# Altium schematic symbol library SamacSys.SchLib: 1235 symbols (part 7 of 13)
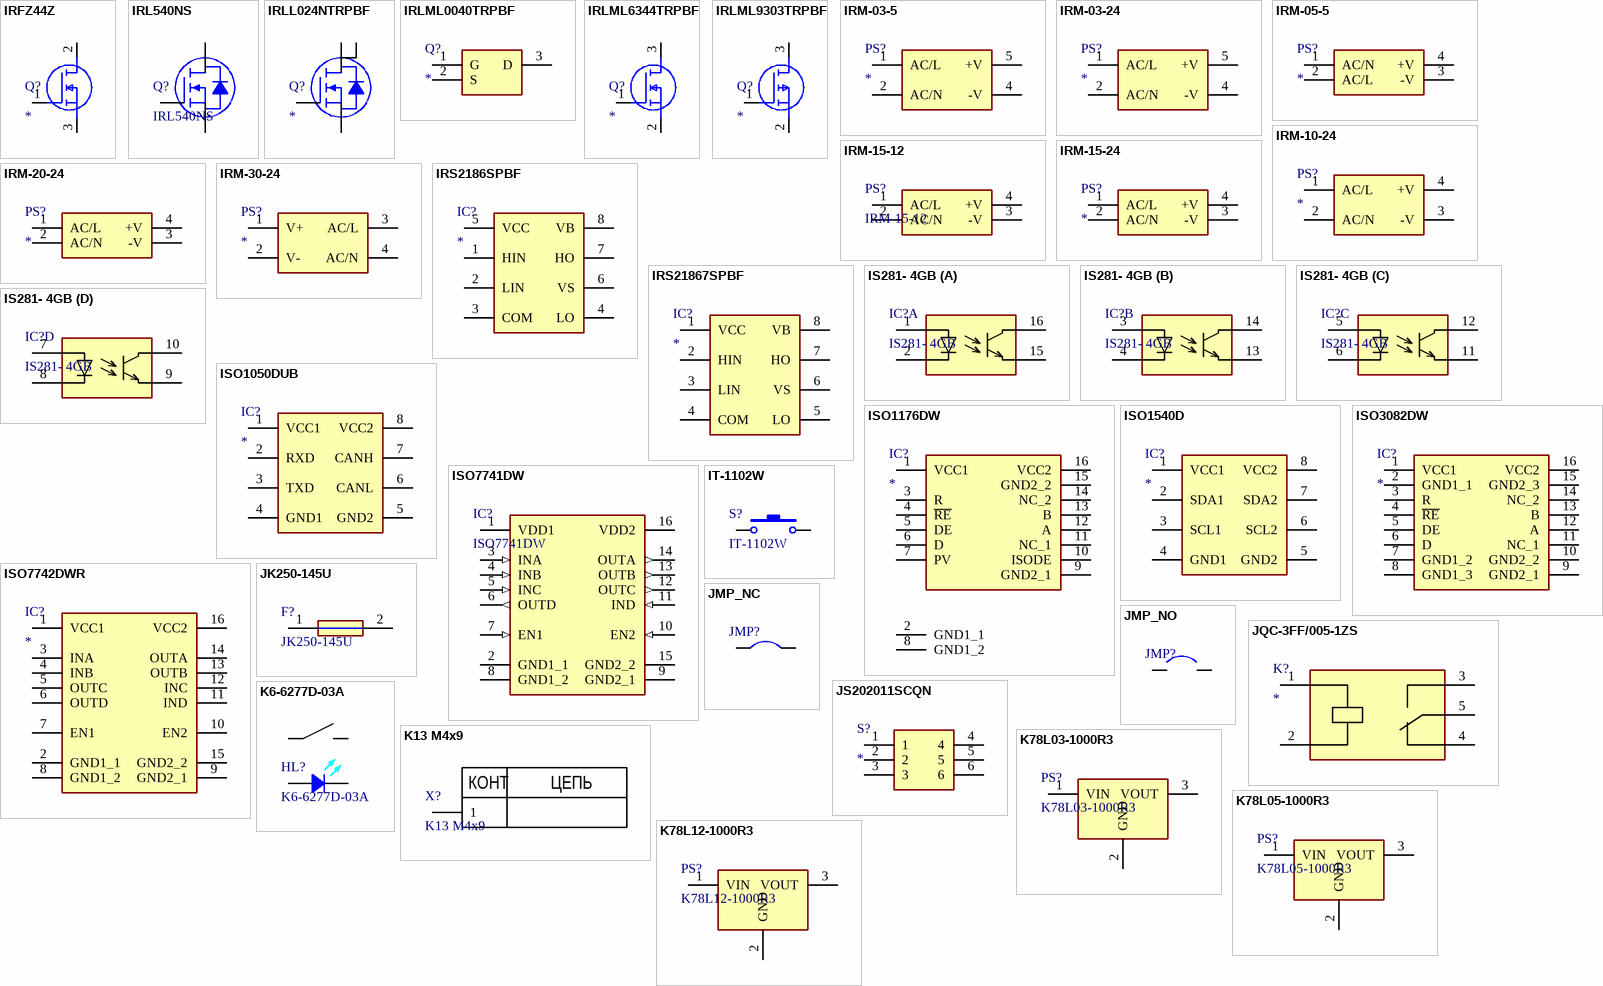
[diagram p51: symbols IRFZ44Z to K78L12-1000R3]

## K6-6277D-03A
designator HL?
SW + LED,, Blue; Manufacturer_Name: Korean Hroparts Elec; Datasheet Link: https://datasheet.datasheetarchive.com/originals/distributors/Datasheets-16/DSA-309848.pdf; Manufacturer_Part_Number: K6-6277D-03A; Mouser Part Number: N/A; Mouser Price/Stock: https://www.mouser.co.uk/ProductDetail/Kingbright/KP-2012MGC?qs=2JU0tDl2GZ0DzyNwePJZSw%3D%3D; Arrow Part Number: KP-2012QBC-D; Arrow Price/Stock: https://www.arrow.com/en/products/kp-2012mgc/kingbright
footprint K6-6277D (Footprint not found)
pins: 1, 2, 3 C, 4 A

## K13 M4x9
designator X?
Terminal Screw Type, 18-14AWG; Manufacturer_Name: Degson; Manufacturer_Part_Number: DG128-5.0-02P-14; Datasheet Link: https://www.degson.com/index.php?a=downloadFile&id=1097383&name=%27ZmlsZTQ=%27&lang=en; Height: 14.26mm
footprint K13 M4*9; pin to pad 1>1+2+3+4
pins: 1
text: КОНТ; ЦЕПЬ

## K78L03-1000R3
designator PS?
DC DC NON ISO 3.3V 1A 6.5V~36V Input; Manufacturer_Name: Mornsun; Datasheet Link: https://tracopower.com/tmh-datasheet/; Height: 10.45mm; Manufacturer_Part_Number: K78L03-1000R3
footprint K78Lxx-1000R3
footprint K78Lxx-500/1000ser
footprint K78xx-500/1000ser
pins: 1 VIN, 2 GND, 3 VOUT

## K78L05-1000R3
designator PS?
DC DC NON ISO 5V 1A 6.5V~36V Input; Manufacturer_Name: Mornsun; Datasheet Link: https://cdn.promelec.ru/upload/items/2025/03/24/K78Lxx-1000R3.pdf; Height: 10.45mm; Manufacturer_Part_Number: K78L05-1000R3
footprint K78Lxx-1000R3
footprint K78Lxx-500/1000ser
footprint K78xx-500/1000ser
pins: 1 VIN, 2 GND, 3 VOUT

## K78L12-1000R3
designator PS?
DC DC NON ISO 12V 1A 6.5V~36V Input; Manufacturer_Name: Mornsun; Datasheet Link: https://cdn.promelec.ru/upload/items/2025/03/24/K78Lxx-1000R3.pdf; Height: 10.45mm; Manufacturer_Part_Number: K78L12-1000R3
footprint K78Lxx-1000R3
footprint K78Lxx-500/1000ser
footprint K78xx-500/1000ser
pins: 1 VIN, 2 GND, 3 VOUT

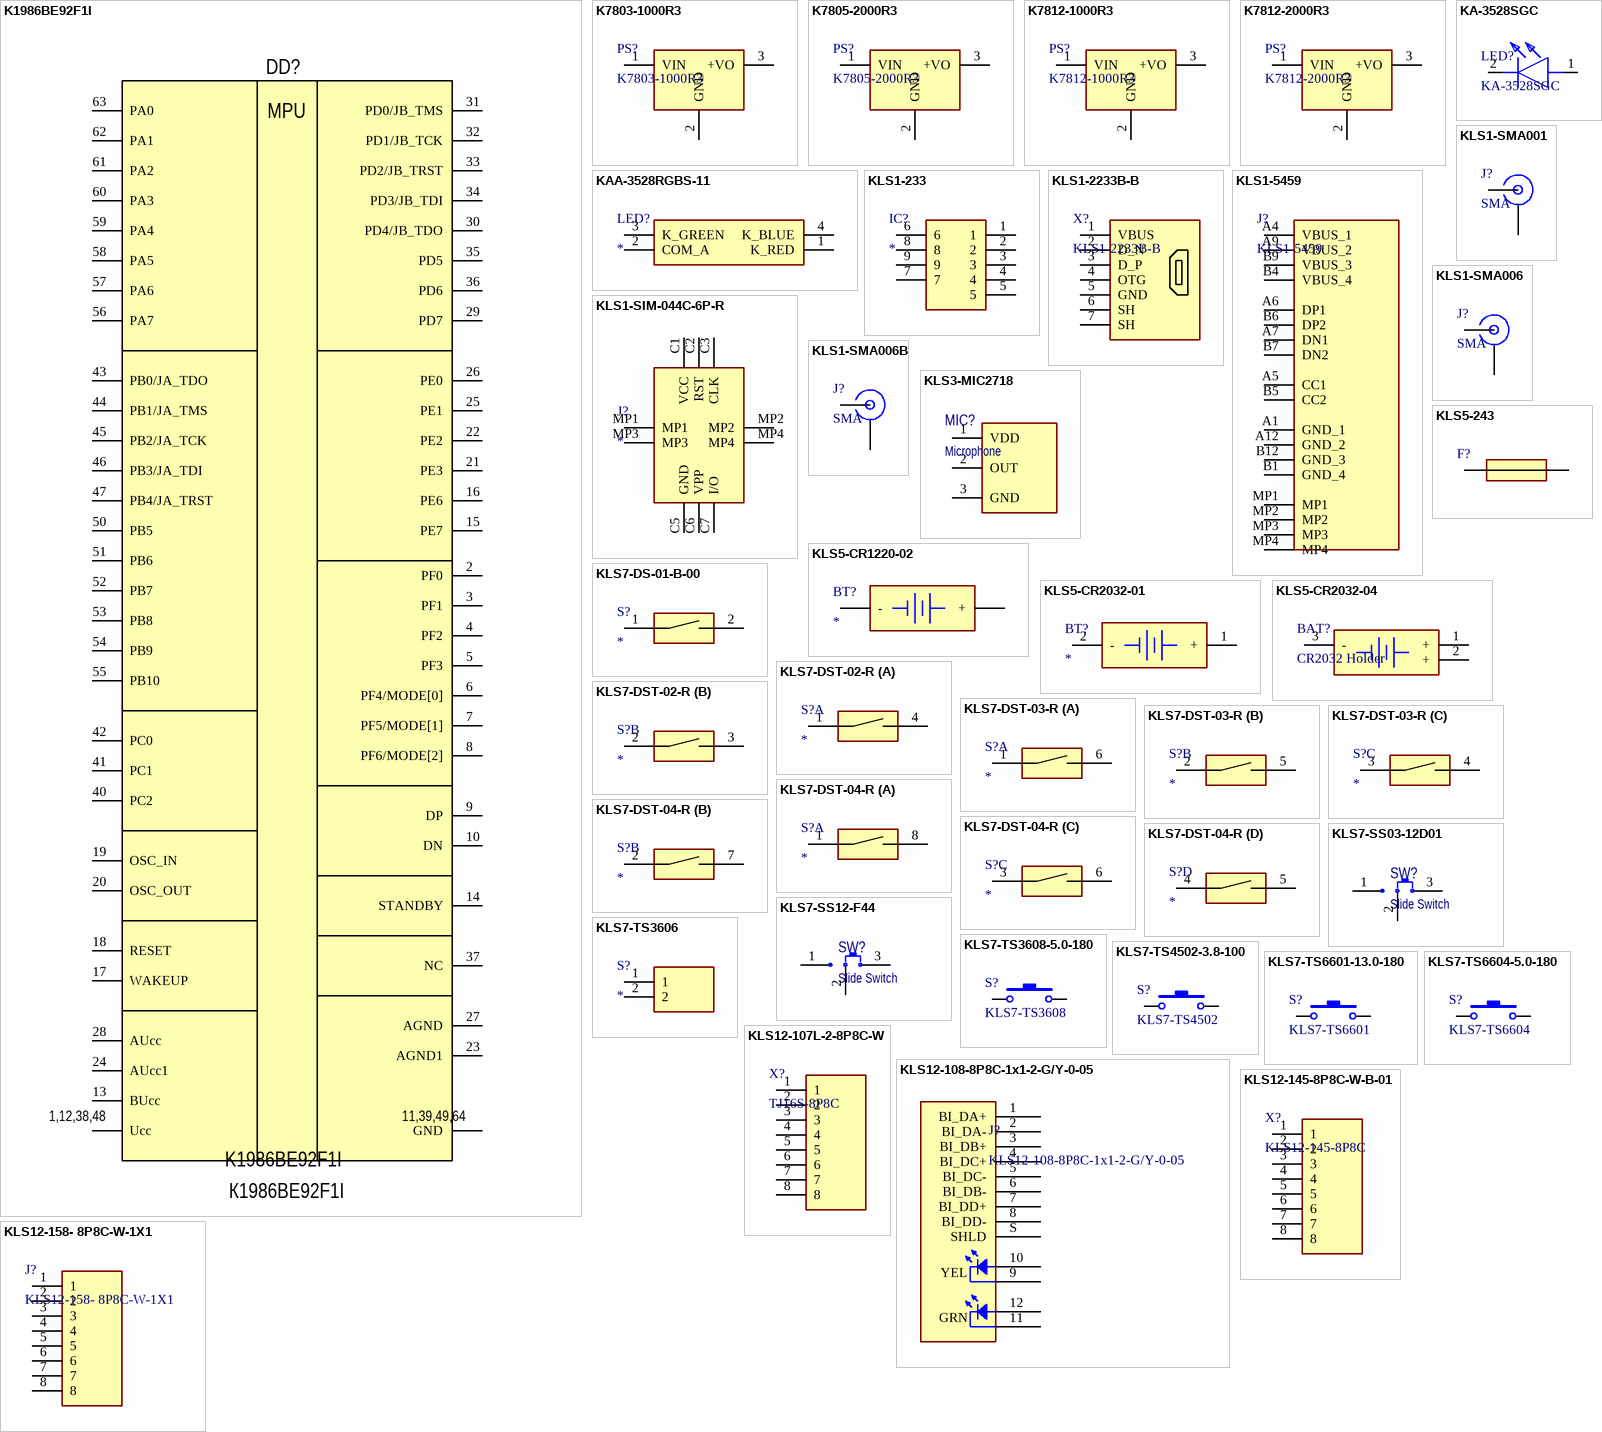
[diagram p20: symbols K1986BE92F1I to KLS12-158- 8P8C-W-1X1]

## K1986BE92F1I
designator DD?
IC MCU 32bit
footprint QFN50P1200X1200X180-64M (QFN, 64-Leads, Body 12,00x12,00mm, Pitch 0,50mm, IPC Low Density)
pins: 1 Ucc, 2 PF0, 3 PF1, 4 PF2, 5 PF3, 6 PF4/MODE[0], 7 PF5/MODE[1], 8 PF6/MODE[2], 9 DP, 10 DN, 11 GND, 12 Ucc, 13 BUcc, 14 STANDBY, 15 PE7, 16 PE6, 17 WAKEUP, 18 RESET, 19 OSC_IN, 20 OSC_OUT, 21 PE3, 22 PE2, 23 AGND1, 24 AUcc1, 25 PE1, 26 PE0, 27 AGND, 28 AUcc, 29 PD7, 30 PD4/JB_TDO, 31 PD0/JB_TMS, 32 PD1/JB_TCK, 33 PD2/JB_TRST, 34 PD3/JB_TDI, 35 PD5, 36 PD6, 37 NC, 38 Ucc, 39 GND, 40 PC2, 41 PC1, 42 PC0, 43 PB0/JA_TDO, 44 PB1/JA_TMS, 45 PB2/JA_TCK, 46 PB3/JA_TDI, 47 PB4/JA_TRST, 48 Ucc, 49 GND, 50 PB5, 51 PB6, 52 PB7, 53 PB8, 54 PB9, 55 PB10, 56 PA7, 57 PA6, 58 PA5, 59 PA4, 60 PA3, 61 PA2, 62 PA1, 63 PA0, 64 GND
text: MPU; 1,12,38,48; 11,39,49,64

## K7803-1000R3
designator PS?
DCDC, Non Isolated, 3,3V, 1W; Manufacturer_Name: MORNSUN; Manufacturer_Part_Number: K7805-1000R3; Datasheet Link: https://www.mornsun-power.com/html/pdf/K7805-2000R3.html; Height: 18mm
footprint K78xx-1000R3
pins: 1 VIN, 2 GND, 3 +VO

## K7805-2000R3
designator PS?
DCDC, Non Isolated, 5V, 2W; Manufacturer_Name: MORNSUN; Datasheet Link: https://www.mornsun-power.com/html/pdf/K7805-2000R3.html; Height: 18mm; Manufacturer_Part_Number: K7805-2000R3
footprint K78052000R3
pins: 1 VIN, 2 GND, 3 +VO

## K7812-1000R3
designator PS?
DCDC, Non Isolated, 12V, 1W; Manufacturer_Name: MORNSUN; Datasheet Link: https://www.mornsun-power.com/html/pdf/K7805-2000R3.html; Height: 18mm; Manufacturer_Part_Number: K7812-1000R3
footprint K78xx-1000R3
pins: 1 VIN, 2 GND, 3 +VO

## K7812-2000R3
designator PS?
DCDC, Non Isolated, 12V, 2W; Manufacturer_Name: MORNSUN; Datasheet Link: https://www.mornsun-power.com/html/pdf/K7805-2000R3.html; Height: 18mm; Manufacturer_Part_Number: K7812-2000R3
footprint K78052000R3
pins: 1 VIN, 2 GND, 3 +VO

## KA-3528SGC
designator LED?
LED; Manufacturer_Name: Kingbright; Datasheet Link: https://componentsearchengine.com/Datasheets/2/KA-3528SGC.pdf; Height: 2.1mm; Manufacturer_Part_Number: KA-3528SGC; Mouser Part Number: N/A; Mouser Price/Stock: https://www.mouser.co.uk/ProductDetail/Kingbright/KA-3528SGC?qs=Kyi72x88zz13uqpLS2dkBg%3D%3D; Arrow Part Number: KA-3528SGC; Arrow Price/Stock: https://www.arrow.com/en/products/ka-3528sgc/kingbright
footprint KA3528SGC
pins: 1 A, 2 K

## KAA-3528RGBS-11
designator LED?
LED; Manufacturer_Name: Kingbright; Manufacturer_Part_Number: KAA-3528RGBS-11; Datasheet Link: http://www.kingbright.com/attachments/file/psearch/000/00/20160808bak/KAA-3528RGBS-11(Ver.3B).pdf; Height: 2.1mm; Mouser Part Number: N/A; Mouser Price/Stock: https://www.mouser.co.uk/ProductDetail/Kingbright/KAA-3528RGBS-11?qs=8qEfIxKlfRlmdzsj8blhNw%3D%3D; Arrow Part Number: KAA-3528RGBS-11; Arrow Price/Stock: https://www.arrow.com/en/products/kaa-3528rgbs-11/kingbright
footprint KAA3528RGBS11
pins: 1 K_RED, 2 COM_A, 3 K_GREEN, 4 K_BLUE

## KLS1-233
designator IC?
Integrated Circuit; Manufacturer_Name: KLS Electronic; Manufacturer_Part_Number: KLS1-233; Height: 2mm
footprint KLS1233
pins: 1, 2, 3, 4, 5, 6, 7, 8, 9

## KLS1-2233B-B
designator X?
Connector, USB, Micro USB 2.0 Vertical; Manufacturer: KLS; Datasheet Link: https://static.chipdip.ru/lib/747/DOC042747020.pdf; Part Number: KLS1-2233B-B; Manufacturer 2: GCT; Part Number 2: USB3130
footprint KLS1-2233B (Micro USB Vertical)
pins: 1 VBUS, 2 D_N, 3 D_P, 4 OTG, 5 GND, 6 SH, 7 SH

## KLS1-5459
designator J?
Connector, USB, TypeC, Vertical, TH; Manufacturer_Name: KLS; Height: 3.21mm; Manufacturer_Part_Number: KLS1-5459
footprint KLS1-5459 (Footprint not found)
pins: A1 GND_1, A4 VBUS_1, A5 CC1, A6 DP1, A7 DN1, A9 VBUS_2, A12 GND_2, B1 GND_4, B4 VBUS_4, B5 CC2, B6 DP2, B7 DN2, B9 VBUS_3, B12 GND_3, MP1, MP2, MP3, MP4

## KLS1-SIM-044C-6P-R
designator J?
Connector; Manufacturer_Name: Ningbo; Manufacturer_Part_Number: L-KLS1-SIM-044C-6P-R; Datasheet Link: http://cnkls.com/admin/product_upload/20190319142459L-KLS1-SIM-044C.pdf; Height: 1.85mm
footprint LKLS1SIM044C6PR
pins: C1 VCC, C2 RST, C3 CLK, C5 GND, C6 VPP, C7 I/O, MP1, MP2, MP3, MP4

## KLS1-SMA001
designator J?, comment SMA
Connector, SMA, Vertical; Manufacturer_Name: KLS; Manufacturer_Part_Number: KLS1-SMA001; Datasheet Link: https://static.chipdip.ru/lib/528/DOC059528548.pdf
footprint 5-1814832-1; pin to pad 2>2+3+4+5
pins: 1 SIGNAL, 2 GND

## KLS1-SMA006
designator J?, comment SMA
Connector, SMA, Right Angle, 17mm; Manufacturer_Name: KLS; Manufacturer_Part_Number: KLS1-SMA001; Datasheet Link: https://static.chipdip.ru/lib/528/DOC059528548.pdf
footprint KLS1-006; pin to pad 2>2+3+4+5
pins: 1 SIGNAL, 2 GND

## KLS1-SMA006B
designator J?, comment SMA
Connector, SMA, Right Angle, 20.5mm; Manufacturer_Name: KLS; Manufacturer_Part_Number: KLS1-SMA001; Datasheet Link: https://static.chipdip.ru/lib/528/DOC059528548.pdf
footprint KLS1-006B; pin to pad 2>2+3+4+5
pins: 1 SIGNAL, 2 GND

## KLS3-MIC2718
designator MIC?, comment Microphone
Silicon MEMS Omni-directional Microphone
footprint KLS3-MIC2718
pins: 1 VDD, 2 OUT, 3 GND

## KLS5-243
designator F?
Fuse Holder, 5.2*20mm; Manufacturer_Name: KLS; Manufacturer_Part_Number: KLS5-243; Datasheet Link: https://www.klsele.com/admin/product_upload/20140310125749KLS5-242.pdf; Height: 11 mm
footprint KLS5-243 (Footprint not found)
footprint KLS5-242 (Fuse Holder, 5.2*20mm)
pins: 1 +VIN, 2 -VIN

## KLS5-CR1220-02
designator BT?
Battery Holder, Horizontal, SMD, CR1220; Manufacturer_Name: KLS Electronic; Manufacturer_Part_Number: KLS5-CR2032-31; Datasheet Link: https://cdn.ozdisan.com/ETicaret_Dosya/497432_334345.pdf; Height: 5.1mm
footprint KLS5CR122002
pins: NEG -, POS +

## KLS5-CR2032-01
designator BT?
Battery Holder, Horizontal, CR2032; Manufacturer_Name: KLS Electronic; Manufacturer_Part_Number: KLS5-CR2032-31; Datasheet Link: https://cdn.ozdisan.com/ETicaret_Dosya/497432_334345.pdf; Height: 5.1mm
footprint KLS5CR203201
pins: 1 +, 2 -

## KLS5-CR2032-04
designator BAT?, comment CR2032 Holder
Battery Holder, Vertical, CR2032; Manufacturer_Name: KLS Electronic; Manufacturer_Part_Number: KLS5-CR2032-04; Datasheet Link: http://www.klsele.com/admin/product_upload/20151124101114KLS5-CR2032-04.pdf; Height: 18.13mm
footprint KLS5CR203204
pins: 1 +, 2 +, 3 -

## KLS7-DS-01-B-00
designator S?
Switch; Manufacturer_Name: KLS Electronic; Manufacturer_Part_Number: KLS7-DS-01-B-00; Datasheet Link: https://static.chipdip.ru/lib/842/DOC003842989.pdf; Height: 6.9mm
footprint KLS7DS01B00
pins: 1 COM, 2 NO

## KLS7-DST-02-R
designator S?
DIP Switch 2P Blue; Manufacturer_Name: KLS; Manufacturer_Part_Number: KLS7-DST-02-R; Datasheet Link: https://www.klsconnector.com/wp-content/uploads/20200522104221KLS7-DST.pdf; Height: 6.6
footprint KLS7-DS02-B
part A pins: 1, 4
part B pins: 2, 3

## KLS7-DST-03-R
designator S?
DIP Switch 3P Blue; Manufacturer_Name: KLS; Manufacturer_Part_Number: KLS7-DST-03-R; Datasheet Link: https://www.klsconnector.com/wp-content/uploads/20200522104221KLS7-DST.pdf; Height: 6.6
footprint KLS7-DS03-B
part A pins: 1, 6
part B pins: 2, 5
part C pins: 3, 4

## KLS7-DST-04-R
designator S?
DIP Switch 4P Blue; Manufacturer_Name: KLS; Manufacturer_Part_Number: KLS7-DST-04-R; Datasheet Link: https://www.klsconnector.com/wp-content/uploads/20200522104221KLS7-DST.pdf; Height: 6.6
footprint KLS7-DS04-B
footprint KLS7-DS04-B_WING
part A pins: 1, 8
part B pins: 2, 7
part C pins: 3, 6
part D pins: 4, 5

## KLS7-SS03-12D01
designator SW?, comment Slide Switch
Slide Switch, 1P2T; Manufacturer: KLS; Part Number: KLS7-SS03-12D01
footprint KLS7-SS03-12D01
pins: 1, 2 COM, 3

## KLS7-SS12-F44
designator SW?, comment Slide Switch
Slide Switch, 1P2T; Manufacturer: KLS; Part Number: KLS7-SS12-F44
footprint KLS7-SS12F44
pins: 1, 2 COM, 3

## KLS7-TS3606
designator S?
Switch; Manufacturer_Name: KLS Electronic; Manufacturer_Part_Number: KLS7-TS3606; Datasheet Link: http://www.klsele.com/admin/product_upload/20120515131507KLS7-TS3606.pdf; Height: 3.5mm
footprint KLS7TS3606
pins: 1, 2

## KLS7-TS3608-5.0-180
designator S?, comment KLS7-TS3608
Switch Tact; Manufacturer_Name: KLS Electronic; Manufacturer_Part_Number: KLS7-TS3608-5.0-180; Datasheet Link: https://img.klsele.com/admin/product_upload/20120515131419KLS7-TS3608.pdf; Height: 5mm
footprint KLS7TS360850180
pins: 1, 2

## KLS7-TS4502-3.8-100
designator S?, comment KLS7-TS4502
Switch Tact; Manufacturer_Name: KLS Electronic; Manufacturer_Part_Number: KLS7-TS4502-3.8-100; Datasheet Link: https://img.klsele.com/admin/product_upload/20120515131419KLS7-TS3608.pdf; Height: 5mm
footprint KLS7TS4502 (4,5mm tactile button); pin to pad 1>1+2 2>3+4
pins: 1, 2

## KLS7-TS6601-13.0-180
designator S?, comment KLS7-TS6601
Switch Tact, 6mm, 13mmH; Manufacturer_Name: KLS Electronic; Manufacturer_Part_Number: KLS7-TS6604-5.0-180; Datasheet Link: https://img.klsele.com/admin/product_upload/20120515131419KLS7-TS3608.pdf; Height: 5mm
footprint KLS7TS6601 (6x6 mm tactile button); pin to pad 1>1+2 2>3+4
pins: 1, 2

## KLS7-TS6604-5.0-180
designator S?, comment KLS7-TS6604
Switch Tact; Manufacturer_Name: KLS Electronic; Manufacturer_Part_Number: KLS7-TS6604-5.0-180; Datasheet Link: https://img.klsele.com/admin/product_upload/20120515131419KLS7-TS3608.pdf; Height: 5mm
footprint KLS7TS6604 (6 2mm tactile button); pin to pad 1>1+2 2>3+4
pins: 1, 2

## KLS12-107L-2-8P8C-W
designator X?, comment TJ16S-8P8C
Connector, RJ-45; Manufacturer_Name: KLS; Manufacturer_Part_Number: KLS12-107L-2-8P8C; Datasheet Link: https://img.klsele.com/admin/product_upload/20191230125157KLS12-145-8P8C.pdf; Height: 16.63mm
footprint TJ16S-8P8C
pins: 1, 2, 3, 4, 5, 6, 7, 8

## KLS12-108-8P8C-1x1-2-G/Y-0-05
designator J?
Connector, RJ-45, with LED, RA
footprint KLS12-108-8P8C-1x1-G/Y-0-05 (RJ45 Receptacle 1 Shielded Right-Angle WithLED)
pins: 1 BI_DA+, 2 BI_DA-, 3 BI_DB+, 4 BI_DC+, 5 BI_DC-, 6 BI_DB-, 7 BI_DD+, 8 BI_DD-, 9 P10, 10 P9, 11 P12, 12 P11, S SHLD
text: YEL; GRN

## KLS12-145-8P8C-W-B-01
designator X?, comment KLS12-145-8P8C
Connector, RJ-45; Manufacturer_Name: KLS; Manufacturer_Part_Number: KLS12-145-8P8C-W-B-01; Datasheet Link: https://img.klsele.com/admin/product_upload/20191230125157KLS12-145-8P8C.pdf; Height: 16.63mm
footprint KLS12-145-8P8C (Footprint not found)
pins: 1, 2, 3, 4, 5, 6, 7, 8

## KLS12-158- 8P8C-W-1X1
designator J?
Connector, RJ-45; Manufacturer_Name: KLS; Datasheet Link: https://www.promelec.ru/fs/sources/1b/fa/67/08/39a111b4bd5c0bc00b1d2612.pdf; Height: 16.63mm; Manufacturer_Part_Number: KLS12-158- 8P8C-W-1X1
footprint 424108314
pins: 1, 2, 3, 4, 5, 6, 7, 8

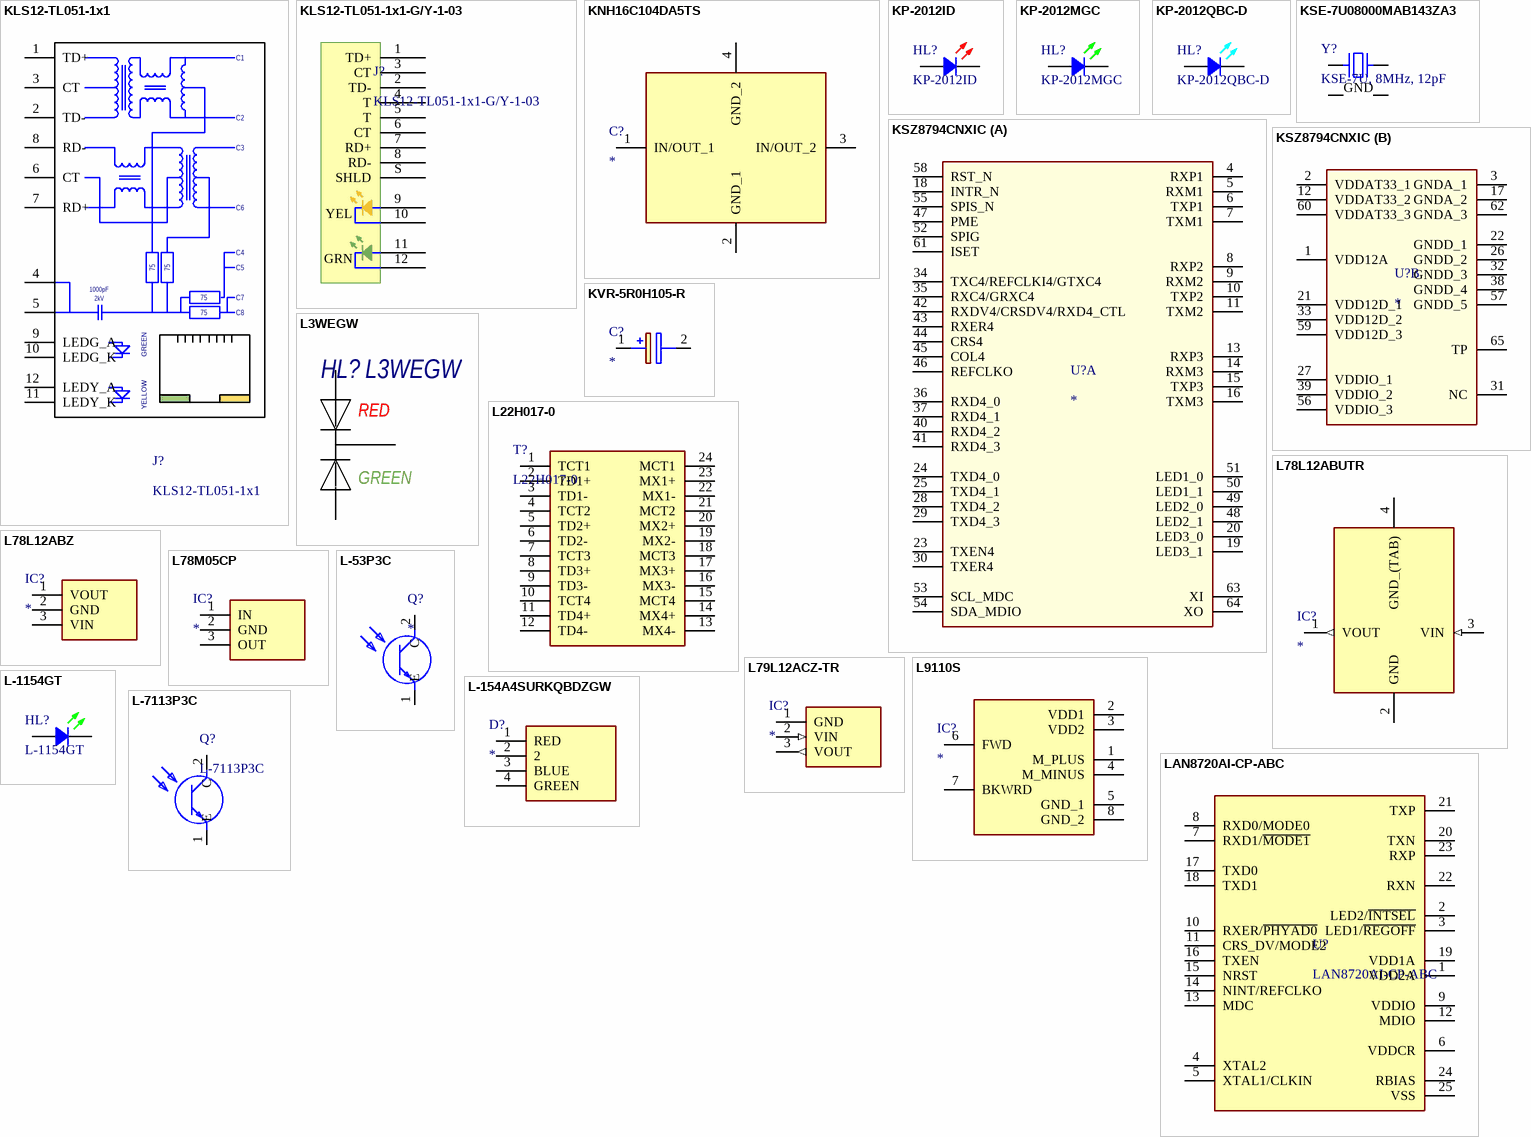
[diagram p21: symbols KLS12-TL051-1x1 to LAN8720AI-CP-ABC]

## KLS12-TL051-1x1
designator J?
RJ45, 8P8C with magnetic and LEDs
footprint KLS12-TL051-1x1-G/Y-1-03 (Magnetic Jack with transformer leds)
pins: 1 TD+, 2 TD-, 3 CT, 4, 5, 6 CT, 7 RD+, 8 RD-, 9 LEDG_A, 10 LEDG_K, 11 LEDY_K, 12 LEDY_A
text: C1; C2; C3; C6; C4; 75; C5; 1000pF; 2kV; C7; C8; GREEN; YELLOW

## KLS12-TL051-1x1-G/Y-1-03
designator J?
Magnetic Jack
footprint KLS12-TL051-1x1-G/Y-1-03 (Magnetic Jack with transformer leds)
pins: 1 TD+, 2 TD-, 3 CT, 4 T, 5 T, 6 CT, 7 RD+, 8 RD-, 9 P9, 10 P10, 11 P11, 12 P12, S SHLD
text: YEL; GRN

## KNH16C104DA5TS
designator C?
Capacitor Polarised; Manufacturer_Name: Kyocera AVX; Manufacturer_Part_Number: KNH16C104DA5TS; Datasheet Link: https://media.digikey.com/pdf/Data%20Sheets/AVX%20PDFs/KNH16_Series.pdf; Height: 0.7mm; Mouser Part Number: 581-KNH16C104DA5TS; Mouser Price/Stock: https://www.mouser.co.uk/ProductDetail/Kyocera-Electronic-Components/KNH16C104DA5TS?qs=55YtniHzbhB%2FMhEmgkwYng%3D%3D
footprint KNH16C104DA5TS
pins: 1 IN/OUT_1, 2 GND_1, 3 IN/OUT_2, 4 GND_2

## KP-2012ID
designator HL?
LED, 0805, Red; Manufacturer_Name: Kingbright; Datasheet Link: https://static.chipdip.ru/lib/356/DOC011356008.pdf; Height: 1.1mm; Manufacturer_Part_Number: KP-2012ID; Mouser Part Number: N/A; Mouser Price/Stock: https://www.mouser.co.uk/ProductDetail/Kingbright/KP-2012MGC?qs=2JU0tDl2GZ0DzyNwePJZSw%3D%3D; Arrow Part Number: KP-2012ID; Arrow Price/Stock: https://www.arrow.com/en/products/kp-2012mgc/kingbright
footprint LEDC2012X110N_RED
pins: 1 A, 2 C

## KP-2012MGC
designator HL?
LED, 0805, Green; Manufacturer_Name: Kingbright; Datasheet Link: https://datasheet.datasheetarchive.com/originals/distributors/Datasheets-16/DSA-309848.pdf; Height: 1.1mm; Manufacturer_Part_Number: KP-2012MGC; Mouser Part Number: N/A; Mouser Price/Stock: https://www.mouser.co.uk/ProductDetail/Kingbright/KP-2012MGC?qs=2JU0tDl2GZ0DzyNwePJZSw%3D%3D; Arrow Part Number: KP-2012MGC; Arrow Price/Stock: https://www.arrow.com/en/products/kp-2012mgc/kingbright
footprint LEDC2012X110N
pins: 1 A, 2 C

## KP-2012QBC-D
designator HL?
LED, 0805, Blue; Manufacturer_Name: Kingbright; Datasheet Link: https://datasheet.datasheetarchive.com/originals/distributors/Datasheets-16/DSA-309848.pdf; Height: 1.1mm; Manufacturer_Part_Number: KP-2012QBC-D; Mouser Part Number: N/A; Mouser Price/Stock: https://www.mouser.co.uk/ProductDetail/Kingbright/KP-2012MGC?qs=2JU0tDl2GZ0DzyNwePJZSw%3D%3D; Arrow Part Number: KP-2012QBC-D; Arrow Price/Stock: https://www.arrow.com/en/products/kp-2012mgc/kingbright
footprint LEDC2012X110N_blue
pins: 1 A, 2 C

## KSE-7U08000MAB143ZA3
designator Y?, comment KSE-7U, 8MHz, 12pF
Crystal or Oscillator, 8MHz, 12pF, 3225; Manufacturer_Name: KEEN SIDE; Manufacturer_Part_Number: DSX321G-25M; Datasheet Link: https://static.chipdip.ru/lib/163/DOC045163688.pdf; Height: 0.7mm
footprint DSX321G20M
pins: 1, 2 GND, 3, 4 GND

## KSZ8794CNXIC
designator U?
Integrated Circuit; Manufacturer_Name: Microchip; Manufacturer_Part_Number: KSZ8794CNXIC; Datasheet Link: http://www.farnell.com/datasheets/2175963.pdf; Height: 0.9mm; Mouser Part Number: 998-KSZ8794CNXIC; Mouser Price/Stock: https://www.mouser.co.uk/ProductDetail/Microchip-Technology-Micrel/KSZ8794CNXIC?qs=%2Fc0cCNcL7XyI05Q4%252BqTErw%3D%3D; Arrow Part Number: KSZ8794CNXIC; Arrow Price/Stock: https://www.arrow.com/en/products/ksz8794cnxic/microchip-technology
footprint QFN40P800X800X90-65N
part A pins: 4 RXP1, 5 RXM1, 6 TXP1, 7 TXM1, 8 RXP2, 9 RXM2, 10 TXP2, 11 TXM2, 13 RXP3, 14 RXM3, 15 TXP3, 16 TXM3, 18 INTR_N, 19 LED3_1, 20 LED3_0, 23 TXEN4, 24 TXD4_0, 25 TXD4_1, 28 TXD4_2, 29 TXD4_3, 30 TXER4, 34 TXC4/REFCLKI4/GTXC4, 35 RXC4/GRXC4, 36 RXD4_0, 37 RXD4_1, 40 RXD4_2, 41 RXD4_3, 42 RXDV4/CRSDV4/RXD4_CTL, 43 RXER4, 44 CRS4, 45 COL4, 46 REFCLKO, 47 PME, 48 LED2_1, 49 LED2_0, 50 LED1_1, 51 LED1_0, 52 SPIG, 53 SCL_MDC, 54 SDA_MDIO, 55 SPIS_N, 58 RST_N, 61 ISET, 63 XI, 64 XO
part B pins: 1 VDD12A, 2 VDDAT33_1, 3 GNDA_1, 12 VDDAT33_2, 17 GNDA_2, 21 VDD12D_1, 22 GNDD_1, 26 GNDD_2, 27 VDDIO_1, 31 NC, 32 GNDD_3, 33 VDD12D_2, 38 GNDD_4, 39 VDDIO_2, 56 VDDIO_3, 57 GNDD_5, 59 VDD12D_3, 60 VDDAT33_3, 62 GNDA_3, 65 TP

## KVR-5R0H105-R
designator C?
Capacitor Polarised; Manufacturer_Name: Eaton; Manufacturer_Part_Number: KVR-5R0H105-R; Datasheet Link: https://www.eaton.com/content/dam/eaton/products/electronic-components/resources/data-sheet/eaton-kvr-supercapacitors-coin-cells-data-sheet-elx1175-en.pdf; Height: 6.3mm; Mouser Part Number: 504-KVR-5R0H105-R; Mouser Price/Stock: https://www.mouser.co.uk/ProductDetail/PowerStor-Eaton/KVR-5R0H105-R?qs=4ASt3YYao0X6olg4e7LOwg%3D%3D
footprint KVR5R0H105R
pins: 1 +, 2 -

## L3WEGW
designator HL?
LED BI-COLOR 3mm; Type: Индикатор единичный; Published: 03.12.2013; Publisher: Артем Голубев
footprint L3WEGW (LED 3MM, BI-COLOR)
pins: 1 А_R "Анод", 2 К "Катод", 3 А_G "Анод"
1 alternate drawing of the same symbol
text: RED; GREEN

## L22H017-0
designator T?
2.5G BaseT / Single Port LAN Filter; Manufacturer_Name: UDE; Datasheet Link: https://www.ude-corp.com/archive/product/item/Datasheet/L22H017-0.pdf; Height: 4; Manufacturer_Part_Number: L22H017-0
footprint SOP99P1000X432-24N
pins: 1 TCT1, 2 TD1+, 3 TD1-, 4 TCT2, 5 TD2+, 6 TD2-, 7 TCT3, 8 TD3+, 9 TD3-, 10 TCT4, 11 TD4+, 12 TD4-, 13 MX4-, 14 MX4+, 15 MCT4, 16 MX3-, 17 MX3+, 18 MCT3, 19 MX2-, 20 MX2+, 21 MCT2, 22 MX1-, 23 MX1+, 24 MCT1

## L78L12ABUTR
designator IC?
Integrated Circuit; Manufacturer_Name: STMicroelectronics; Manufacturer_Part_Number: L78L12ABUTR; Datasheet Link: https://www.st.com/resource/en/datasheet/l78l.pdf; Mouser Part Number: 511-L78L12ABUTR; Mouser Price/Stock: https://www.mouser.co.uk/ProductDetail/STMicroelectronics/L78L12ABUTR?qs=22WmWNTp1rqV64PB%252BTvXVQ%3D%3D; Arrow Part Number: L78L12ABUTR; Arrow Price/Stock: https://www.arrow.com/en/products/l78l12abutr/stmicroelectronics?region=nac
footprint ST-SOT-89
pins: 1 VOUT (out), 2 GND (power), 3 VIN (in), 4 GND_(TAB) (power)

## L78L12ABZ
designator IC?
Integrated Circuit; Manufacturer_Name: STMicroelectronics; Manufacturer_Part_Number: L78L12ABZ; Datasheet Link: https://www.st.com/resource/en/datasheet/l78l.pdf; Height: 4.95mm; Mouser Part Number: 511-L78L12ABZ; Mouser Price/Stock: https://www.mouser.co.uk/ProductDetail/STMicroelectronics/L78L12ABZ?qs=JquAdH79urYX0IHa2GaUkg%3D%3D; Arrow Part Number: L78L12ABZ; Arrow Price/Stock: https://www.arrow.com/en/products/l78l12abz/stmicroelectronics?region=europe
footprint TS1107A1AP
pins: 1 VOUT (power), 2 GND (power), 3 VIN (power)

## L78M05CP
designator IC?
Integrated Circuit; Manufacturer_Name: STMicroelectronics; Manufacturer_Part_Number: L78M05CP; Datasheet Link: http://www.st.com/web/en/resource/technical/document/datasheet/CD00000447.pdf; Height: 4.6mm; Mouser Part Number: 511-L78M05CP; Mouser Price/Stock: https://www.mouser.co.uk/ProductDetail/STMicroelectronics/L78M05CP?qs=W%252B4obUA0F3anQylSbAkrfw%3D%3D; Arrow Part Number: L78M05CP; Arrow Price/Stock: https://www.arrow.com/en/products/l78m05cp/stmicroelectronics?region=europe
footprint TO255P460X1020X2030-3P
pins: 1 IN (power), 2 GND (power), 3 OUT (power)

## L79L12ACZ-TR
designator IC?
Integrated Circuit; Manufacturer_Name: STMicroelectronics; Manufacturer_Part_Number: L79L12ACZ-TR; Datasheet Link: https://www.st.com/resource/en/datasheet/l79l.pdf; Height: 4.95mm; Mouser Part Number: 511-L79L12ACZ-TR; Mouser Price/Stock: https://www.mouser.co.uk/ProductDetail/STMicroelectronics/L79L12ACZ-TR?qs=2UmUEagh6QrsxOFbYFnWxg%3D%3D; Arrow Part Number: L79L12ACZ-TR; Arrow Price/Stock: https://www.arrow.com/en/products/l79l12acz-tr/stmicroelectronics?region=nac
footprint TS1107A1AP
pins: 1 GND (power), 2 VIN (in), 3 VOUT (out)

## L9110S
designator IC?
Integrated Circuit; Manufacturer_Name: Wuxi I-core Elec; Manufacturer_Part_Number: L9110S; Datasheet Link: https://datasheet.lcsc.com/szlcsc/Wuxi-Zhongwei-Aisin-Elec-L9110S_C85174.pdf; Height: 1.75mm
footprint SOIC127P600X175-8N
pins: 1 M_PLUS, 2 VDD1, 3 VDD2, 4 M_MINUS, 5 GND_1, 6 FWD, 7 BKWRD, 8 GND_2

## L-53P3C
designator Q?
Phototransistor; Manufacturer_Name: Kingbright; Manufacturer_Part_Number: L-53P3C; Datasheet Link: https://www.farnell.com/datasheets/1683594.pdf; Height: 9.85mm; Mouser Part Number: N/A; Mouser Price/Stock: https://www.mouser.com/Search/Refine.aspx?Keyword=N%2FA; Arrow Part Number: L-53P3C; Arrow Price/Stock: https://www.arrow.com/en/products/l-53p3c/kingbright
footprint L53P3C
pins: 1 E, 2 C

## L-154A4SURKQBDZGW
designator D?
Diode; Manufacturer_Name: Kingbright; Manufacturer_Part_Number: L-154A4SURKQBDZGW; Mouser Part Number: N/A; Mouser Price/Stock: https://www.mouser.co.uk/ProductDetail/Kingbright/L-154A4SURKQBDZGW?qs=2JU0tDl2GZ2gTi%2F5%252BRufqQ%3D%3D; Arrow Part Number: L-154A4SURKQBDZGW; Arrow Price/Stock: https://www.arrow.com/en/products/l-154a4surkqbdzgw/kingbright
footprint KNIGHTBRIGHT-1.27PITCH-4PIN
pins: 1 RED, 2, 3 BLUE, 4 GREEN

## L-1154GT
designator HL?
LED, 3mm, Green; Manufacturer_Name: Kingbright; Datasheet Link: https://static.chipdip.ru/lib/195/DOC000195138.pdf; Manufacturer_Part_Number: L-1154GT; Mouser Part Number: N/A; Mouser Price/Stock: https://www.mouser.co.uk/ProductDetail/Kingbright/L-1154GT?qs=2JU0tDl2GZ2IKSfxbyKuMQ%3D%3D
footprint LED_3MM_GREEN
pins: A, C

## L-7113P3C
designator Q?
Phototransistor; Manufacturer_Name: Kingbright; Manufacturer_Part_Number: L-53P3C; Datasheet Link: https://www.farnell.com/datasheets/1683594.pdf; Height: 9.85mm; Mouser Part Number: N/A; Mouser Price/Stock: https://www.mouser.com/Search/Refine.aspx?Keyword=N%2FA; Arrow Part Number: L-53P3C; Arrow Price/Stock: https://www.arrow.com/en/products/l-53p3c/kingbright
footprint L53P3C
pins: 1 E, 2 C

## LAN8720AI-CP-ABC
designator U?
10/100 Base-T/TX Ethernet Transceiver with RMII Interface; Manufacturer_Name: Microchip; Datasheet Link: http://www.microchip.com/mymicrochip/filehandler.aspx?ddocname=en586588; Height: 1mm; Manufacturer_Part_Number: LAN8720AI-CP-ABC; Mouser Part Number: 579-LAN8720AI-CP-ABC; Mouser Price/Stock: https://www.mouser.co.uk/ProductDetail/Microchip-Technology/LAN8720AI-CP-ABC?qs=hxOdJ78B8ntmoAF5rclddw%3D%3D; Arrow Part Number: LAN8720AI-CP-ABC; Arrow Price/Stock: https://www.arrow.com/en/products/lan8720ai-cp-abc/microchip-technology?region=nac
footprint QFN50P400X400X100-25N-D
pins: 1 VDD2A, 2 LED2/~{INTSEL}, 3 LED1/~{REGOFF}, 4 XTAL2, 5 XTAL1/CLKIN, 6 VDDCR, 7 RXD1/~{MODE1}, 8 RXD0/MODE0, 9 VDDIO, 10 RXER/~{PHYAD0}, 11 CRS_DV/MODE2, 12 MDIO, 13 MDC, 14 NINT/REFCLKO, 15 NRST, 16 TXEN, 17 TXD0, 18 TXD1, 19 VDD1A, 20 TXN, 21 TXP, 22 RXN, 23 RXP, 24 RBIAS, 25 VSS

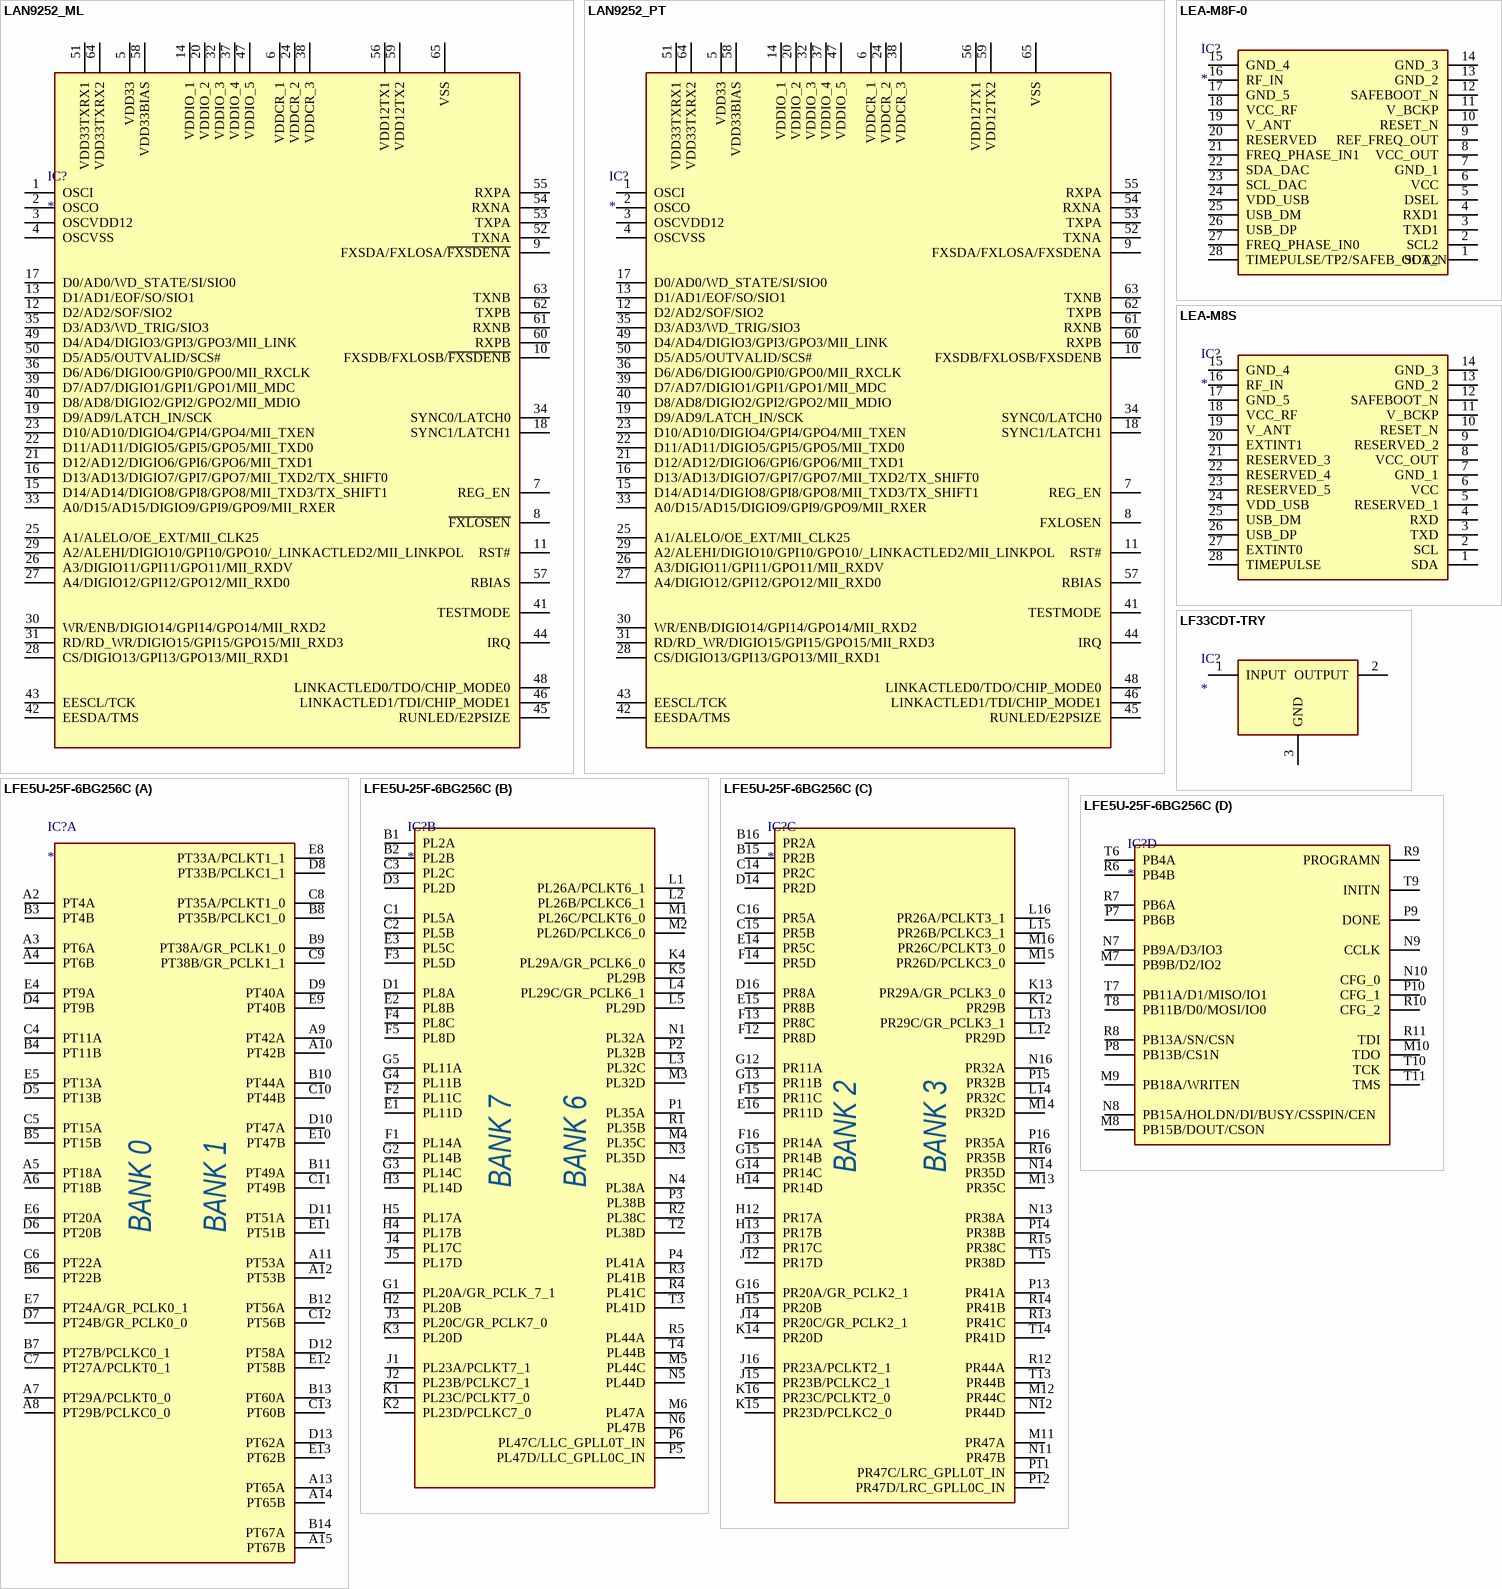
[diagram p22: symbols LAN9252_ML to LFE5U-25F-6BG256C]

## LAN9252_ML
designator IC?
Integrated Circuit; Manufacturer_Name: Microchip; Manufacturer_Part_Number: LAN9252/ML; Datasheet Link: https://componentsearchengine.com/Datasheets/1/LAN9252_ML.pdf; Height: 1mm; Mouser Part Number: 579-LAN9252/ML; Mouser Price/Stock: https://www.mouser.co.uk/ProductDetail/Microchip-Technology/LAN9252-ML?qs=%252ByRm1sYhYIl68yMSuZ2bQg%3D%3D; Arrow Part Number: LAN9252/ML; Arrow Price/Stock: https://www.arrow.com/en/products/lan9252ml/microchip-technology?utm_currency=USD&region=nac
footprint QFN50P900X900X100-65N-D
pins: 1 OSCI, 2 OSCO, 3 OSCVDD12, 4 OSCVSS, 5 VDD33, 6 VDDCR_1, 7 REG_EN, 8 ~{FXLOSEN}, 9 FXSDA/FXLOSA/~{FXSDENA}, 10 FXSDB/FXLOSB/~{FXSDENB}, 11 RST#, 12 D2/AD2/SOF/SIO2, 13 D1/AD1/EOF/SO/SIO1, 14 VDDIO_1, 15 D14/AD14/DIGIO8/GPI8/GPO8/MII_TXD3/TX_SHIFT1, 16 D13/AD13/DIGIO7/GPI7/GPO7/MII_TXD2/TX_SHIFT0, 17 D0/AD0/WD_STATE/SI/SIO0, 18 SYNC1/LATCH1, 19 D9/AD9/LATCH_IN/SCK, 20 VDDIO_2, 21 D12/AD12/DIGIO6/GPI6/GPO6/MII_TXD1, 22 D11/AD11/DIGIO5/GPI5/GPO5/MII_TXD0, 23 D10/AD10/DIGIO4/GPI4/GPO4/MII_TXEN, 24 VDDCR_2, 25 A1/ALELO/OE_EXT/MII_CLK25, 26 A3/DIGIO11/GPI11/GPO11/MII_RXDV, 27 A4/DIGIO12/GPI12/GPO12/MII_RXD0, 28 CS/DIGIO13/GPI13/GPO13/MII_RXD1, 29 A2/ALEHI/DIGIO10/GPI10/GPO10/_LINKACTLED2/MII_LINKPOL, 30 WR/ENB/DIGIO14/GPI14/GPO14/MII_RXD2, 31 RD/RD_WR/DIGIO15/GPI15/GPO15/MII_RXD3, 32 VDDIO_3, 33 A0/D15/AD15/DIGIO9/GPI9/GPO9/MII_RXER, 34 SYNC0/LATCH0, 35 D3/AD3/WD_TRIG/SIO3, 36 D6/AD6/DIGIO0/GPI0/GPO0/MII_RXCLK, 37 VDDIO_4, 38 VDDCR_3, 39 D7/AD7/DIGIO1/GPI1/GPO1/MII_MDC, 40 D8/AD8/DIGIO2/GPI2/GPO2/MII_MDIO, 41 TESTMODE, 42 EESDA/TMS, 43 EESCL/TCK, 44 IRQ, 45 RUNLED/E2PSIZE, 46 LINKACTLED1/TDI/CHIP_MODE1, 47 VDDIO_5, 48 LINKACTLED0/TDO/CHIP_MODE0, 49 D4/AD4/DIGIO3/GPI3/GPO3/MII_LINK, 50 D5/AD5/OUTVALID/SCS#, 51 VDD33TXRX1, 52 TXNA, 53 TXPA, 54 RXNA, 55 RXPA, 56 VDD12TX1, 57 RBIAS, 58 VDD33BIAS, 59 VDD12TX2, 60 RXPB, 61 RXNB, 62 TXPB, 63 TXNB, 64 VDD33TXRX2, 65 VSS

## LAN9252_PT
designator IC?
Integrated Circuit; Manufacturer_Name: Microchip; Manufacturer_Part_Number: LAN9252/PT; Datasheet Link: https://componentsearchengine.com/Datasheets/1/LAN9252_PT.pdf; Height: 1.2mm; Mouser Part Number: 579-LAN9252/PT; Mouser Price/Stock: https://www.mouser.co.uk/ProductDetail/Microchip-Technology/LAN9252-PT?qs=%252ByRm1sYhYIkN4y4wMc7rzA%3D%3D; Arrow Part Number: LAN9252/PT; Arrow Price/Stock: https://www.arrow.com/en/products/lan9252pt/microchip-technology?utm_currency=USD&region=nac
footprint QFP50P1200X1200X120-65N
pins: 1 OSCI, 2 OSCO, 3 OSCVDD12, 4 OSCVSS, 5 VDD33, 6 VDDCR_1, 7 REG_EN, 8 FXLOSEN, 9 FXSDA/FXLOSA/FXSDENA, 10 FXSDB/FXLOSB/FXSDENB, 11 RST#, 12 D2/AD2/SOF/SIO2, 13 D1/AD1/EOF/SO/SIO1, 14 VDDIO_1, 15 D14/AD14/DIGIO8/GPI8/GPO8/MII_TXD3/TX_SHIFT1, 16 D13/AD13/DIGIO7/GPI7/GPO7/MII_TXD2/TX_SHIFT0, 17 D0/AD0/WD_STATE/SI/SIO0, 18 SYNC1/LATCH1, 19 D9/AD9/LATCH_IN/SCK, 20 VDDIO_2, 21 D12/AD12/DIGIO6/GPI6/GPO6/MII_TXD1, 22 D11/AD11/DIGIO5/GPI5/GPO5/MII_TXD0, 23 D10/AD10/DIGIO4/GPI4/GPO4/MII_TXEN, 24 VDDCR_2, 25 A1/ALELO/OE_EXT/MII_CLK25, 26 A3/DIGIO11/GPI11/GPO11/MII_RXDV, 27 A4/DIGIO12/GPI12/GPO12/MII_RXD0, 28 CS/DIGIO13/GPI13/GPO13/MII_RXD1, 29 A2/ALEHI/DIGIO10/GPI10/GPO10/_LINKACTLED2/MII_LINKPOL, 30 WR/ENB/DIGIO14/GPI14/GPO14/MII_RXD2, 31 RD/RD_WR/DIGIO15/GPI15/GPO15/MII_RXD3, 32 VDDIO_3, 33 A0/D15/AD15/DIGIO9/GPI9/GPO9/MII_RXER, 34 SYNC0/LATCH0, 35 D3/AD3/WD_TRIG/SIO3, 36 D6/AD6/DIGIO0/GPI0/GPO0/MII_RXCLK, 37 VDDIO_4, 38 VDDCR_3, 39 D7/AD7/DIGIO1/GPI1/GPO1/MII_MDC, 40 D8/AD8/DIGIO2/GPI2/GPO2/MII_MDIO, 41 TESTMODE, 42 EESDA/TMS, 43 EESCL/TCK, 44 IRQ, 45 RUNLED/E2PSIZE, 46 LINKACTLED1/TDI/CHIP_MODE1, 47 VDDIO_5, 48 LINKACTLED0/TDO/CHIP_MODE0, 49 D4/AD4/DIGIO3/GPI3/GPO3/MII_LINK, 50 D5/AD5/OUTVALID/SCS#, 51 VDD33TXRX1, 52 TXNA, 53 TXPA, 54 RXNA, 55 RXPA, 56 VDD12TX1, 57 RBIAS, 58 VDD33BIAS, 59 VDD12TX2, 60 RXPB, 61 RXNB, 62 TXPB, 63 TXNB, 64 VDD33TXRX2, 65 VSS

## LEA-M8F-0
designator IC?
Integrated Circuit; Manufacturer_Name: u-blox; Manufacturer_Part_Number: LEA-M8F-0; Datasheet Link: https://content.u-blox.com/sites/default/files/documents/LEA-M8F_DataSheet_UBX-14001772.pdf; Height: 3.9mm; Mouser Part Number: 377-LEA-M8F-0; Mouser Price/Stock: https://www.mouser.co.uk/ProductDetail/u-blox/LEA-M8F-0?qs=KUoIvG%2F9IlbqimLgpKzp4A%3D%3D
footprint LEAM8F0
pins: 1 SDA2, 2 SCL2, 3 TXD1, 4 RXD1, 5 DSEL, 6 VCC, 7 GND_1, 8 VCC_OUT, 9 REF_FREQ_OUT, 10 RESET_N, 11 V_BCKP, 12 SAFEBOOT_N, 13 GND_2, 14 GND_3, 15 GND_4, 16 RF_IN, 17 GND_5, 18 VCC_RF, 19 V_ANT, 20 RESERVED, 21 FREQ_PHASE_IN1, 22 SDA_DAC, 23 SCL_DAC, 24 VDD_USB, 25 USB_DM, 26 USB_DP, 27 FREQ_PHASE_IN0, 28 TIMEPULSE/TP2/SAFEB_OOT_N

## LEA-M8S
designator IC?
Integrated Circuit; Manufacturer_Name: u-blox; Manufacturer_Part_Number: LEA-M8S; Datasheet Link: https://www.u-blox.com/sites/default/files/LEA-M8S-FW3_DataSheet_%28UBX-16010205%29.pdf; Height: 2.7mm; Mouser Part Number: N/A; Mouser Price/Stock: https://www.mouser.co.uk/ProductDetail/u-blox/LEA-M8S?qs=KUoIvG%2F9IlYlar0PVoRKBw%3D%3D
footprint LEAM8S
pins: 1 SDA, 2 SCL, 3 TXD, 4 RXD, 5 RESERVED_1, 6 VCC, 7 GND_1, 8 VCC_OUT, 9 RESERVED_2, 10 RESET_N, 11 V_BCKP, 12 SAFEBOOT_N, 13 GND_2, 14 GND_3, 15 GND_4, 16 RF_IN, 17 GND_5, 18 VCC_RF, 19 V_ANT, 20 EXTINT1, 21 RESERVED_3, 22 RESERVED_4, 23 RESERVED_5, 24 VDD_USB, 25 USB_DM, 26 USB_DP, 27 EXTINT0, 28 TIMEPULSE

## LF33CDT-TRY
designator IC?
IC LDO 3.3V 500mA DPAK; Manufacturer_Name: STMicroelectronics; Manufacturer_Part_Number: LF33CDT-TRY; Datasheet Link: https://www.st.com/resource/en/datasheet/lfxx.pdf; Height: 2mm; Mouser Part Number: 511-LF33CDT-TRY; Mouser Price/Stock: https://www.mouser.co.uk/ProductDetail/STMicroelectronics/LF33CDT-TRY?qs=fnYUjNMxfVBCqlsIwZoKRw%3D%3D; Arrow Part Number: LF33CDT-TRY; Arrow Price/Stock: https://www.arrow.com/en/products/lf33cdt-try/stmicroelectronics?region=nac
footprint LD1117DT33
pins: 1 INPUT, 2 OUTPUT, 3 GND

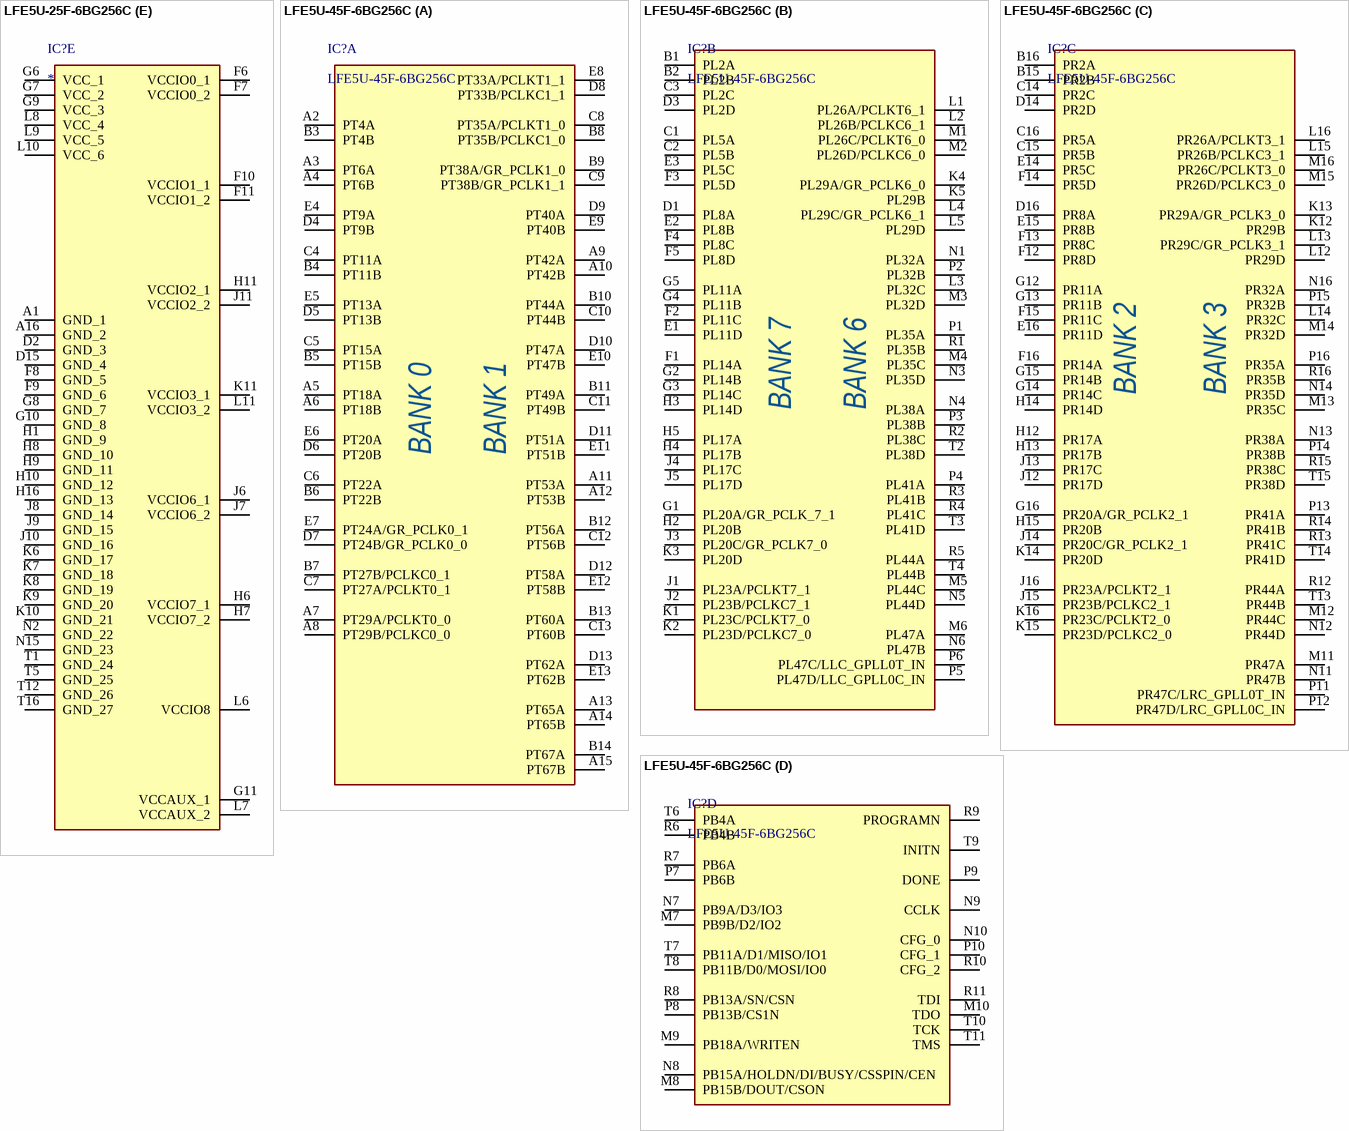
[diagram p23: symbols LFE5U-25F-6BG256C to LFE5U-45F-6BG256C]

## LFE5U-25F-6BG256C
designator IC?
FPGA, 24K LUT, 137kbit RAM; Manufacturer_Name: Lattice Semiconductor; Manufacturer_Part_Number: LFE5U-25F-6BG256C; Datasheet Link: http://www.latticesemi.com/view_document?document_id=50461; Height: 1.7mm; Mouser Part Number: 842-LFE5U25F6BG256C; Mouser Price/Stock: https://www.mouser.co.uk/ProductDetail/Lattice/LFE5U-25F-6BG256C?qs=w%2Fv1CP2dgqrTaI14mPfyBg%3D%3D; Arrow Part Number: LFE5U-25F-6BG256C; Arrow Price/Stock: https://www.arrow.com/en/products/lfe5u-25f-6bg256c/lattice-semiconductor?region=nac
footprint BGA256C80P16X16_1400X1400X170
part A pins: A2 PT4A, A3 PT6A, A4 PT6B, A5 PT18A, A6 PT18B, A7 PT29A/PCLKT0_0, A8 PT29B/PCLKC0_0, A9 PT42A, A10 PT42B, A11 PT53A, A12 PT53B, A13 PT65A, A14 PT65B, A15 PT67B, B3 PT4B, B4 PT11B, B5 PT15B, B6 PT22B, B7 PT27B/PCLKC0_1, B8 PT35B/PCLKC1_0, B9 PT38A/GR_PCLK1_0, B10 PT44A, B11 PT49A, B12 PT56A, B13 PT60A, B14 PT67A, C4 PT11A, C5 PT15A, C6 PT22A, C7 PT27A/PCLKT0_1, C8 PT35A/PCLKT1_0, C9 PT38B/GR_PCLK1_1, C10 PT44B, C11 PT49B, C12 PT56B, C13 PT60B, D4 PT9B, D5 PT13B, D6 PT20B, D7 PT24B/GR_PCLK0_0, D8 PT33B/PCLKC1_1, D9 PT40A, D10 PT47A, D11 PT51A, D12 PT58A, D13 PT62A, E4 PT9A, E5 PT13A, E6 PT20A, E7 PT24A/GR_PCLK0_1, E8 PT33A/PCLKT1_1, E9 PT40B, E10 PT47B, E11 PT51B, E12 PT58B, E13 PT62B
part B pins: B1 PL2A, B2 PL2B, C1 PL5A, C2 PL5B, C3 PL2C, D1 PL8A, D3 PL2D, E1 PL11D, E2 PL8B, E3 PL5C, F1 PL14A, F2 PL11C, F3 PL5D, F4 PL8C, F5 PL8D, G1 PL20A/GR_PCLK_7_1, G2 PL14B, G3 PL14C, G4 PL11B, G5 PL11A, H2 PL20B, H3 PL14D, H4 PL17B, H5 PL17A, J1 PL23A/PCLKT7_1, J2 PL23B/PCLKC7_1, J3 PL20C/GR_PCLK7_0, J4 PL17C, J5 PL17D, K1 PL23C/PCLKT7_0, K2 PL23D/PCLKC7_0, K3 PL20D, K4 PL29A/GR_PCLK6_0, K5 PL29B, L1 PL26A/PCLKT6_1, L2 PL26B/PCLKC6_1, L3 PL32C, L4 PL29C/GR_PCLK6_1, L5 PL29D, M1 PL26C/PCLKT6_0, M2 PL26D/PCLKC6_0, M3 PL32D, M4 PL35C, M5 PL44C, M6 PL47A, N1 PL32A, N3 PL35D, N4 PL38A, N5 PL44D, N6 PL47B, P1 PL35A, P2 PL32B, P3 PL38B, P4 PL41A, P5 PL47D/LLC_GPLL0C_IN, P6 PL47C/LLC_GPLL0T_IN, R1 PL35B, R2 PL38C, R3 PL41B, R4 PL41C, R5 PL44A, T2 PL38D, T3 PL41D, T4 PL44B
part C pins: B15 PR2B, B16 PR2A, C14 PR2C, C15 PR5B, C16 PR5A, D14 PR2D, D16 PR8A, E14 PR5C, E15 PR8B, E16 PR11D, F12 PR8D, F13 PR8C, F14 PR5D, F15 PR11C, F16 PR14A, G12 PR11A, G13 PR11B, G14 PR14C, G15 PR14B, G16 PR20A/GR_PCLK2_1, H12 PR17A, H13 PR17B, H14 PR14D, H15 PR20B, J12 PR17D, J13 PR17C, J14 PR20C/GR_PCLK2_1, J15 PR23B/PCLKC2_1, J16 PR23A/PCLKT2_1, K12 PR29B, K13 PR29A/GR_PCLK3_0, K14 PR20D, K15 PR23D/PCLKC2_0, K16 PR23C/PCLKT2_0, L12 PR29D, L13 PR29C/GR_PCLK3_1, L14 PR32C, L15 PR26B/PCLKC3_1, L16 PR26A/PCLKT3_1, M11 PR47A, M12 PR44C, M13 PR35C, M14 PR32D, M15 PR26D/PCLKC3_0, M16 PR26C/PCLKT3_0, N11 PR47B, N12 PR44D, N13 PR38A, N14 PR35D, N16 PR32A, P11 PR47C/LRC_GPLL0T_IN, P12 PR47D/LRC_GPLL0C_IN, P13 PR41A, P14 PR38B, P15 PR32B, P16 PR35A, R12 PR44A, R13 PR41C, R14 PR41B, R15 PR38C, R16 PR35B, T13 PR44B, T14 PR41D, T15 PR38D
part D pins: M7 PB9B/D2/IO2, M8 PB15B/DOUT/CSON, M9 PB18A/WRITEN, M10 TDO, N7 PB9A/D3/IO3, N8 PB15A/HOLDN/DI/BUSY/CSSPIN/CEN, N9 CCLK, N10 CFG_0, P7 PB6B, P8 PB13B/CS1N, P9 DONE, P10 CFG_1, R6 PB4B, R7 PB6A, R8 PB13A/SN/CSN, R9 PROGRAMN, R10 CFG_2, R11 TDI, T6 PB4A, T7 PB11A/D1/MISO/IO1, T8 PB11B/D0/MOSI/IO0, T9 INITN, T10 TCK, T11 TMS
part E pins: A1 GND_1, A16 GND_2, D2 GND_3, D15 GND_4, F6 VCCIO0_1, F7 VCCIO0_2, F8 GND_5, F9 GND_6, F10 VCCIO1_1, F11 VCCIO1_2, G6 VCC_1, G7 VCC_2, G8 GND_7, G9 VCC_3, G10 GND_8, G11 VCCAUX_1, H1 GND_9, H6 VCCIO7_1, H7 VCCIO7_2, H8 GND_10, H9 GND_11, H10 GND_12, H11 VCCIO2_1, H16 GND_13, J6 VCCIO6_1, J7 VCCIO6_2, J8 GND_14, J9 GND_15, J10 GND_16, J11 VCCIO2_2, K6 GND_17, K7 GND_18, K8 GND_19, K9 GND_20, K10 GND_21, K11 VCCIO3_1, L6 VCCIO8, L7 VCCAUX_2, L8 VCC_4, L9 VCC_5, L10 VCC_6, L11 VCCIO3_2, N2 GND_22, N15 GND_23, T1 GND_24, T5 GND_25, T12 GND_26, T16 GND_27
part A text: BANK 0; BANK 1
part B text: BANK 7; BANK 6
part C text: BANK 2; BANK 3

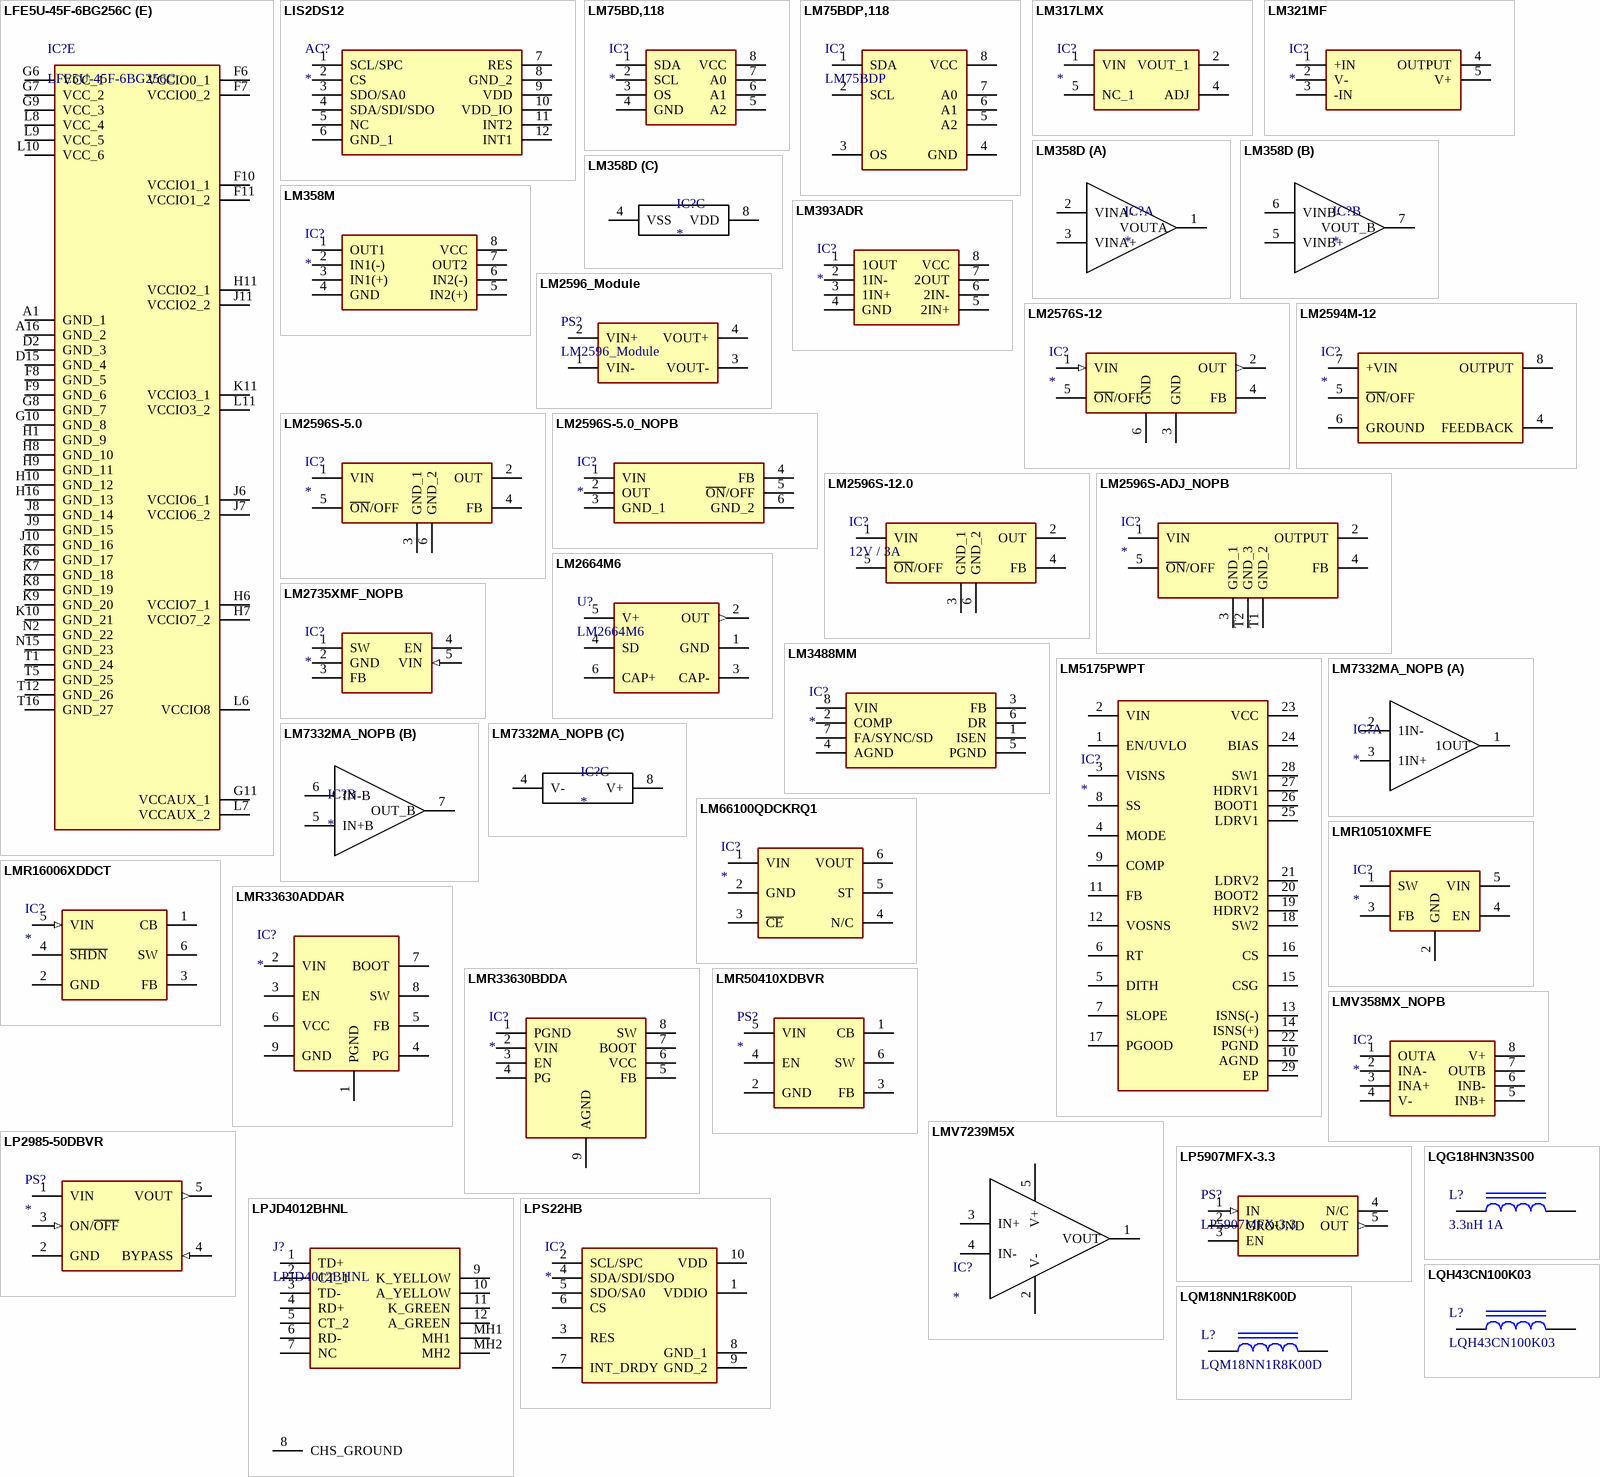
[diagram p24: symbols LFE5U-45F-6BG256C to LQM18NN1R8K00D]

## LFE5U-45F-6BG256C
designator IC?
FPGA, 44K LUT, 351kbit RAM; Manufacturer_Name: Lattice Semiconductor; Datasheet Link: http://www.latticesemi.com/view_document?document_id=50461; Height: 1.7mm; Manufacturer_Part_Number: LFE5U-45F-6BG256C; Mouser Part Number: LFE5U-45F-6BG256C; Mouser Price/Stock: https://www.mouser.co.uk/ProductDetail/Lattice/LFE5U-25F-6BG256C?qs=w%2Fv1CP2dgqrTaI14mPfyBg%3D%3D; Arrow Part Number: LFE5U-45F-6BG256C; Arrow Price/Stock: https://www.arrow.com/en/products/lfe5u-25f-6bg256c/lattice-semiconductor?region=nac
footprint BGA256C80P16X16_1400X1400X170
part A pins: A2 PT4A, A3 PT6A, A4 PT6B, A5 PT18A, A6 PT18B, A7 PT29A/PCLKT0_0, A8 PT29B/PCLKC0_0, A9 PT42A, A10 PT42B, A11 PT53A, A12 PT53B, A13 PT65A, A14 PT65B, A15 PT67B, B3 PT4B, B4 PT11B, B5 PT15B, B6 PT22B, B7 PT27B/PCLKC0_1, B8 PT35B/PCLKC1_0, B9 PT38A/GR_PCLK1_0, B10 PT44A, B11 PT49A, B12 PT56A, B13 PT60A, B14 PT67A, C4 PT11A, C5 PT15A, C6 PT22A, C7 PT27A/PCLKT0_1, C8 PT35A/PCLKT1_0, C9 PT38B/GR_PCLK1_1, C10 PT44B, C11 PT49B, C12 PT56B, C13 PT60B, D4 PT9B, D5 PT13B, D6 PT20B, D7 PT24B/GR_PCLK0_0, D8 PT33B/PCLKC1_1, D9 PT40A, D10 PT47A, D11 PT51A, D12 PT58A, D13 PT62A, E4 PT9A, E5 PT13A, E6 PT20A, E7 PT24A/GR_PCLK0_1, E8 PT33A/PCLKT1_1, E9 PT40B, E10 PT47B, E11 PT51B, E12 PT58B, E13 PT62B
part B pins: B1 PL2A, B2 PL2B, C1 PL5A, C2 PL5B, C3 PL2C, D1 PL8A, D3 PL2D, E1 PL11D, E2 PL8B, E3 PL5C, F1 PL14A, F2 PL11C, F3 PL5D, F4 PL8C, F5 PL8D, G1 PL20A/GR_PCLK_7_1, G2 PL14B, G3 PL14C, G4 PL11B, G5 PL11A, H2 PL20B, H3 PL14D, H4 PL17B, H5 PL17A, J1 PL23A/PCLKT7_1, J2 PL23B/PCLKC7_1, J3 PL20C/GR_PCLK7_0, J4 PL17C, J5 PL17D, K1 PL23C/PCLKT7_0, K2 PL23D/PCLKC7_0, K3 PL20D, K4 PL29A/GR_PCLK6_0, K5 PL29B, L1 PL26A/PCLKT6_1, L2 PL26B/PCLKC6_1, L3 PL32C, L4 PL29C/GR_PCLK6_1, L5 PL29D, M1 PL26C/PCLKT6_0, M2 PL26D/PCLKC6_0, M3 PL32D, M4 PL35C, M5 PL44C, M6 PL47A, N1 PL32A, N3 PL35D, N4 PL38A, N5 PL44D, N6 PL47B, P1 PL35A, P2 PL32B, P3 PL38B, P4 PL41A, P5 PL47D/LLC_GPLL0C_IN, P6 PL47C/LLC_GPLL0T_IN, R1 PL35B, R2 PL38C, R3 PL41B, R4 PL41C, R5 PL44A, T2 PL38D, T3 PL41D, T4 PL44B
part C pins: B15 PR2B, B16 PR2A, C14 PR2C, C15 PR5B, C16 PR5A, D14 PR2D, D16 PR8A, E14 PR5C, E15 PR8B, E16 PR11D, F12 PR8D, F13 PR8C, F14 PR5D, F15 PR11C, F16 PR14A, G12 PR11A, G13 PR11B, G14 PR14C, G15 PR14B, G16 PR20A/GR_PCLK2_1, H12 PR17A, H13 PR17B, H14 PR14D, H15 PR20B, J12 PR17D, J13 PR17C, J14 PR20C/GR_PCLK2_1, J15 PR23B/PCLKC2_1, J16 PR23A/PCLKT2_1, K12 PR29B, K13 PR29A/GR_PCLK3_0, K14 PR20D, K15 PR23D/PCLKC2_0, K16 PR23C/PCLKT2_0, L12 PR29D, L13 PR29C/GR_PCLK3_1, L14 PR32C, L15 PR26B/PCLKC3_1, L16 PR26A/PCLKT3_1, M11 PR47A, M12 PR44C, M13 PR35C, M14 PR32D, M15 PR26D/PCLKC3_0, M16 PR26C/PCLKT3_0, N11 PR47B, N12 PR44D, N13 PR38A, N14 PR35D, N16 PR32A, P11 PR47C/LRC_GPLL0T_IN, P12 PR47D/LRC_GPLL0C_IN, P13 PR41A, P14 PR38B, P15 PR32B, P16 PR35A, R12 PR44A, R13 PR41C, R14 PR41B, R15 PR38C, R16 PR35B, T13 PR44B, T14 PR41D, T15 PR38D
part D pins: M7 PB9B/D2/IO2, M8 PB15B/DOUT/CSON, M9 PB18A/WRITEN, M10 TDO, N7 PB9A/D3/IO3, N8 PB15A/HOLDN/DI/BUSY/CSSPIN/CEN, N9 CCLK, N10 CFG_0, P7 PB6B, P8 PB13B/CS1N, P9 DONE, P10 CFG_1, R6 PB4B, R7 PB6A, R8 PB13A/SN/CSN, R9 PROGRAMN, R10 CFG_2, R11 TDI, T6 PB4A, T7 PB11A/D1/MISO/IO1, T8 PB11B/D0/MOSI/IO0, T9 INITN, T10 TCK, T11 TMS
part E pins: A1 GND_1, A16 GND_2, D2 GND_3, D15 GND_4, F6 VCCIO0_1, F7 VCCIO0_2, F8 GND_5, F9 GND_6, F10 VCCIO1_1, F11 VCCIO1_2, G6 VCC_1, G7 VCC_2, G8 GND_7, G9 VCC_3, G10 GND_8, G11 VCCAUX_1, H1 GND_9, H6 VCCIO7_1, H7 VCCIO7_2, H8 GND_10, H9 GND_11, H10 GND_12, H11 VCCIO2_1, H16 GND_13, J6 VCCIO6_1, J7 VCCIO6_2, J8 GND_14, J9 GND_15, J10 GND_16, J11 VCCIO2_2, K6 GND_17, K7 GND_18, K8 GND_19, K9 GND_20, K10 GND_21, K11 VCCIO3_1, L6 VCCIO8, L7 VCCAUX_2, L8 VCC_4, L9 VCC_5, L10 VCC_6, L11 VCCIO3_2, N2 GND_22, N15 GND_23, T1 GND_24, T5 GND_25, T12 GND_26, T16 GND_27
part A text: BANK 0; BANK 1
part B text: BANK 7; BANK 6
part C text: BANK 2; BANK 3

## LIS2DS12
designator AC?
Accelerometer; Manufacturer_Name: STMicroelectronics; Manufacturer_Part_Number: LIS2DS12; Datasheet Link: http://www.st.com/content/ccc/resource/technical/document/datasheet/ce/32/55/ac/e1/87/46/84/DM00177048.pdf/files/DM00177048.pdf/jcr:content/translations/en.DM00177048.pdf
footprint LGA-12
pins: 1 SCL/SPC, 2 CS, 3 SDO/SA0, 4 SDA/SDI/SDO, 5 NC, 6 GND_1, 7 RES, 8 GND_2, 9 VDD, 10 VDD_IO, 11 INT2, 12 INT1

## LM75BD,118
designator IC?
Integrated Circuit; Manufacturer_Name: NXP; Manufacturer_Part_Number: LM75BD,118; Datasheet Link: http://www.nxp.com/docs/en/data-sheet/LM75B.pdf; Height: 1.75mm; Mouser Part Number: 771-LM75BD118; Mouser Price/Stock: https://www.mouser.co.uk/ProductDetail/NXP-Semiconductors/LM75BD118?qs=tKEQ0l%252B78Dle%2FKEoz9Gpmw%3D%3D; Arrow Part Number: LM75BD,118; Arrow Price/Stock: https://www.arrow.com/en/products/lm75bd118/nxp-semiconductors?region=nac
footprint SOIC127P600X175-8N
pins: 1 SDA, 2 SCL, 3 OS, 4 GND, 5 A2, 6 A1, 7 A0, 8 VCC

## LM75BDP,118
designator IC?, comment LM75BDP
Integrated Circuit; Manufacturer_Name: NXP; Manufacturer_Part_Number: LM75BDP,118; Datasheet Link: http://www.nxp.com/docs/en/data-sheet/LM75B.pdf; Height: 1.1mm; Mouser Part Number: 771-LM75BDP; Mouser Price/Stock: https://www.mouser.co.uk/ProductDetail/NXP-Semiconductors/LM75BDP118?qs=NVaOCIL7CYS15EE%252BCogVfA%3D%3D; Arrow Part Number: LM75BDP,118; Arrow Price/Stock: https://www.arrow.com/en/products/lm75bdp118/nxp-semiconductors?region=nac
footprint SOP65P490X110-8N
pins: 1 SDA, 2 SCL, 3 OS, 4 GND, 5 A2, 6 A1, 7 A0, 8 VCC

## LM317LMX
designator IC?
Integrated Circuit; Manufacturer_Name: onsemi; Manufacturer_Part_Number: LM317LMX; Datasheet Link: https://www.ti.com/lit/ds/symlink/lm317l-n.pdf?HQS=dis-dk-null-digikeymode-dsf-pf-null-wwe&ts=1613971369395; Height: 1.75mm; Mouser Part Number: 512-LM317LMX; Mouser Price/Stock: https://www.mouser.co.uk/ProductDetail/onsemi-Fairchild/LM317LMX?qs=DgZPx0AY41lcVeKBs7y%2FHw%3D%3D; Arrow Part Number: LM317LMX; Arrow Price/Stock: https://www.arrow.com/en/products/lm317lmx/on-semiconductor
footprint SOIC127P600X175-8N; pin to pad 2>2+3+6+7 5>5+8
pins: 1 VIN, 2 VOUT_1, 4 ADJ, 5 NC_1

## LM321MF
designator IC?
Integrated Circuit; Manufacturer_Name: Texas Instruments; Manufacturer_Part_Number: LM321MF/NOPB; Datasheet Link: https://datasheet.datasheetarchive.com/originals/distributors/Datasheets-SFU2/DSASFU100036193.pdf; Height: 1.45mm; Mouser Part Number: 926-LM321MF/NOPB; Mouser Price/Stock: https://www.mouser.co.uk/ProductDetail/Texas-Instruments/LM321MF-NOPB?qs=X1J7HmVL2ZEjaSKPrGsivQ%3D%3D; Arrow Part Number: LM321MF/NOPB; Arrow Price/Stock: https://www.arrow.com/en/products/lm321mfnopb/texas-instruments?region=nac
footprint SOT95P280X145-5N
pins: 1 +IN, 2 V-, 3 -IN, 4 OUTPUT, 5 V+

## LM358D
designator IC?
Integrated Circuit; Manufacturer_Name: Texas Instruments; Manufacturer_Part_Number: LM358D; Datasheet Link: http://www.ti.com/lit/ds/symlink/lm358.pdf; Height: 1.75mm; Mouser Part Number: 595-LM358D; Mouser Price/Stock: https://www.mouser.co.uk/ProductDetail/Texas-Instruments/LM358D?qs=X1HXWTtiZ0RJBM%2FvBfVo8g%3D%3D; Arrow Part Number: LM358D; Arrow Price/Stock: https://www.arrow.com/en/products/lm358d/texas-instruments?region=nac
footprint SOIC127P600X175-8N
part A pins: 1 VOUTA, 2 VINA-, 3 VINA+
part B pins: 5 VINB+, 6 VINB-, 7 VOUT_B
part C pins: 4 VSS, 8 VDD

## LM358M
designator IC?
Integrated Circuit; Manufacturer_Name: onsemi; Manufacturer_Part_Number: LM358M; Datasheet Link: https://www.onsemi.com/pub/Collateral/LM358A-D.pdf; Height: 1.75mm; Mouser Part Number: 512-LM358M; Mouser Price/Stock: https://www.mouser.com/Search/Refine.aspx?Keyword=512-LM358M; Arrow Part Number: LM358M; Arrow Price/Stock: https://www.arrow.com/en/products/lm358m/on-semiconductor
footprint SOIC127P600X175-8N
pins: 1 OUT1, 2 IN1(-), 3 IN1(+), 4 GND, 5 IN2(+), 6 IN2(-), 7 OUT2, 8 VCC

## LM393ADR
designator IC?
Integrated Circuit; Manufacturer_Name: Texas Instruments; Manufacturer_Part_Number: LM393ADR; Datasheet Link: http://www.ti.com/lit/ds/symlink/lm393a.pdf; Height: 1.75mm; Mouser Part Number: 595-LM393ADR; Mouser Price/Stock: https://www.mouser.co.uk/ProductDetail/Texas-Instruments/LM393ADR?qs=VolsR0DjNPq76ZV6Dhd8nQ%3D%3D; Arrow Part Number: LM393ADR; Arrow Price/Stock: https://www.arrow.com/en/products/lm393adr/texas-instruments?utm_currency=USD&region=nac
footprint SOIC127P600X175-8N
pins: 1 1OUT, 2 1IN-, 3 1IN+, 4 GND, 5 2IN+, 6 2IN-, 7 2OUT, 8 VCC

## LM2576S-12
designator IC?
Integrated Circuit; Manufacturer_Name: Texas Instruments; Manufacturer_Part_Number: LM2576S-12/NOPB; Datasheet Link: https://datasheet.datasheetarchive.com/originals/distributors/Datasheets-SFU2/DSASFU100036591.pdf; Height: 4.65mm; Mouser Part Number: 926-LM2576S-12/NOPB; Mouser Price/Stock: https://www.mouser.co.uk/ProductDetail/Texas-Instruments/LM2576S-12-NOPB?qs=X1J7HmVL2ZFNh71Bqi5%2F%2FQ%3D%3D; Arrow Part Number: LM2576S-12/NOPB; Arrow Price/Stock: https://www.arrow.com/en/products/lm2576s-12nopb/texas-instruments?region=nac
footprint TO170P1435X465-6N
pins: 1 VIN (in), 2 OUT (out), 3 GND, 4 FB, 5 ~{ON}/OFF, 6 GND (power)

## LM2594M-12
designator IC?
Integrated Circuit; Manufacturer_Name: Texas Instruments; Manufacturer_Part_Number: LM2594M-12/NOPB; Datasheet Link: https://datasheet.datasheetarchive.com/originals/distributors/Datasheets-SFU2/DSASFU100036599.pdf; Height: 1.75mm; Mouser Part Number: 926-LM2594M-12/NOPB; Mouser Price/Stock: https://www.mouser.co.uk/ProductDetail/Texas-Instruments/LM2594M-12-NOPB?qs=X1J7HmVL2ZHdSH2D3IP2Eg%3D%3D; Arrow Part Number: LM2594M-12/NOPB; Arrow Price/Stock: https://www.arrow.com/en/products/lm2594m-12nopb/texas-instruments?region=nac
footprint SOIC127P600X175-8N
pins: 4 FEEDBACK, 5 ~{ON}/OFF, 6 GROUND, 7 +VIN, 8 OUTPUT

## LM2596_Module
designator PS?
Module, DCDC 3-40V to 1.5-35V, 3A
footprint LM2596 (DC-DC Module, 3A)
pins: 1 VIN-, 2 VIN+, 3 VOUT-, 4 VOUT+

## LM2596S-5.0
designator IC?
Integrated Circuit; Manufacturer_Name: Texas Instruments; Manufacturer_Part_Number: LM2596S-5.0; Datasheet Link: https://www.ti.com/lit/gpn/LM2596; Mouser Part Number: 926-LM2596S-50; Mouser Price/Stock: https://www.mouser.co.uk/ProductDetail/Texas-Instruments/LM2596S-5.0?qs=X1J7HmVL2ZGcOr96VNr%252B%2Fw%3D%3D; Arrow Part Number: LM2596S-5.0; Arrow Price/Stock: https://www.arrow.com/en/products/lm2596s-5.0/texas-instruments?region=nac
footprint TO263-5L
pins: 1 VIN, 2 OUT, 3 GND_1, 4 FB, 5 ~{ON}/OFF, 6 GND_2

## LM2596S-5.0_NOPB
designator IC?
Integrated Circuit; Manufacturer_Name: Texas Instruments; Manufacturer_Part_Number: LM2596S-5.0/NOPB; Datasheet Link: https://www.ti.com/lit/gpn/LM2596; Mouser Part Number: 926-LM2596S-5.0/NOPB; Mouser Price/Stock: https://www.mouser.co.uk/ProductDetail/Texas-Instruments/LM2596S-5.0-NOPB?qs=X1J7HmVL2ZHVjCOmW%252BYINA%3D%3D; Arrow Part Number: LM2596S-5.0/NOPB; Arrow Price/Stock: https://www.arrow.com/en/products/lm2596s-5.0nopb/texas-instruments?region=nac
footprint TO263-5L
pins: 1 VIN, 2 OUT, 3 GND_1, 4 FB, 5 ~{ON}/OFF, 6 GND_2

## LM2596S-12.0
designator IC?, comment 12V / 3A
Integrated Circuit; Manufacturer_Name: Texas Instruments; Manufacturer_Part_Number: LM2596S-5.0; Datasheet Link: https://www.ti.com/lit/gpn/LM2596; Mouser Part Number: 926-LM2596S-50; Mouser Price/Stock: https://www.mouser.co.uk/ProductDetail/Texas-Instruments/LM2596S-5.0?qs=X1J7HmVL2ZGcOr96VNr%252B%2Fw%3D%3D; Arrow Part Number: LM2596S-5.0; Arrow Price/Stock: https://www.arrow.com/en/products/lm2596s-5.0/texas-instruments?region=nac
footprint TO263-5L
pins: 1 VIN, 2 OUT, 3 GND_1, 4 FB, 5 ~{ON}/OFF, 6 GND_2

## LM2596S-ADJ_NOPB
designator IC?
Integrated Circuit; Manufacturer_Name: Texas Instruments; Manufacturer_Part_Number: LM2596S-ADJ/NOPB; Datasheet Link: https://www.ti.com/lit/ds/symlink/lm2596.pdf?HQS=ti-null-null-sf-df-pf-sep-wwe&ts=1592978195629; Height: 4.57mm; Mouser Part Number: 926-LM2596S-ADJ/NOPB; Mouser Price/Stock: https://www.mouser.co.uk/ProductDetail/Texas-Instruments/LM2596S-ADJ-NOPB?qs=X1J7HmVL2ZHoMN0DLDcNog%3D%3D; Arrow Part Number: LM2596S-ADJ/NOPB; Arrow Price/Stock: https://www.arrow.com/en/products/lm2596s-adjnopb/texas-instruments?region=nac
footprint TO263-5L
pins: 1 VIN, 2 OUTPUT, 3 GND_1, 4 FB, 5 ~{ON}/OFF, T1 GND_2, T2 GND_3

## LM2664M6
designator U?
Integrated Circuit; Manufacturer_Name: Texas Instruments; Datasheet Link: http://www.ti.com/lit/ds/symlink/lm2664.pdf; Height: 1.45mm; Manufacturer_Part_Number: LM2664M6; Mouser Part Number: 926-LM2664M6; Mouser Price/Stock: https://www.mouser.co.uk/ProductDetail/Texas-Instruments/LM2664M6?qs=X1J7HmVL2ZFneF3zQ9mdUQ%3D%3D; Arrow Part Number: LM2664M6; Arrow Price/Stock: https://www.arrow.com/en/products/lm2664m6/texas-instruments?region=nac
footprint SOT95P280X145-6N
pins: 1 GND (power), 2 OUT (out), 3 CAP-, 4 SD, 5 V+, 6 CAP+

## LM2735XMF_NOPB
designator IC?
Integrated Circuit; Manufacturer_Name: Texas Instruments; Manufacturer_Part_Number: LM2735XMF/NOPB; Datasheet Link: http://www.ti.com/lit/ds/symlink/lm2735.pdf; Height: 1.45mm; Mouser Part Number: 926-LM2735XMF/NOPB; Mouser Price/Stock: https://www.mouser.co.uk/ProductDetail/Texas-Instruments/LM2735XMF-NOPB?qs=X1J7HmVL2ZGWlm%2F0hOdpKw%3D%3D; Arrow Part Number: LM2735XMF/NOPB; Arrow Price/Stock: https://www.arrow.com/en/products/lm2735xmfnopb/texas-instruments?region=nac
footprint SOT95P280X145-5N
pins: 1 SW, 2 GND (power), 3 FB, 4 EN, 5 VIN (in)

## LM3488MM
designator IC?
Integrated Circuit; Manufacturer_Name: Texas Instruments; Manufacturer_Part_Number: LM3488MM; Datasheet Link: http://www.ti.com/lit/ds/symlink/lm3488.pdf; Height: 1.1mm; Mouser Part Number: 926-LM3488MM; Mouser Price/Stock: https://www.mouser.co.uk/ProductDetail/Texas-Instruments/LM3488MM?qs=X1J7HmVL2ZF99wiIrTysxw%3D%3D; Arrow Part Number: LM3488MM; Arrow Price/Stock: https://www.arrow.com/en/products/lm3488mm/texas-instruments?region=nac
footprint SOP65P490X110-8N
pins: 1 ISEN, 2 COMP, 3 FB, 4 AGND, 5 PGND, 6 DR, 7 FA/SYNC/SD, 8 VIN

## LM5175PWPT
designator IC?
Integrated Circuit; Manufacturer_Name: Texas Instruments; Manufacturer_Part_Number: LM5175PWPT; Datasheet Link: http://www.ti.com/lit/gpn/lm5175; Height: 1.2mm; Mouser Part Number: 595-LM5175PWPT; Mouser Price/Stock: https://www.mouser.co.uk/ProductDetail/Texas-Instruments/LM5175PWPT?qs=mveuKKgDN2gTJmTmD1zLAw%3D%3D; Arrow Part Number: LM5175PWPT; Arrow Price/Stock: https://www.arrow.com/en/products/lm5175pwpt/texas-instruments?utm_currency=USD&region=nac
footprint SOP65P640X120-29N
pins: 1 EN/UVLO, 2 VIN, 3 VISNS, 4 MODE, 5 DITH, 6 RT, 7 SLOPE, 8 SS, 9 COMP, 10 AGND, 11 FB, 12 VOSNS, 13 ISNS(-), 14 ISNS(+), 15 CSG, 16 CS, 17 PGOOD, 18 SW2, 19 HDRV2, 20 BOOT2, 21 LDRV2, 22 PGND, 23 VCC, 24 BIAS, 25 LDRV1, 26 BOOT1, 27 HDRV1, 28 SW1, 29 EP

## LM7332MA_NOPB
designator IC?
IC OPAMP GP 2 CIRCUIT 8SOIC; Manufacturer_Name: Texas Instruments; Manufacturer_Part_Number: LM7332MA/NOPB; Datasheet Link: http://www.ti.com/lit/gpn/lm7332; Height: 1.75mm; Mouser Part Number: 926-LM7332MA/NOPB; Mouser Price/Stock: https://www.mouser.co.uk/ProductDetail/Texas-Instruments/LM7332MA-NOPB?qs=QbsRYf82W3HTYG13NX3OCw%3D%3D; Arrow Part Number: LM7332MA/NOPB; Arrow Price/Stock: https://www.arrow.com/en/products/lm7332manopb/texas-instruments?region=nac
footprint SOIC127P600X175-8N
part A pins: 1 1OUT, 2 1IN-, 3 1IN+
part B pins: 5 IN+B, 6 IN-B, 7 OUT_B
part C pins: 4 V-, 8 V+

## LM66100QDCKRQ1
designator IC?
Integrated Circuit; Manufacturer_Name: Texas Instruments; Manufacturer_Part_Number: LM66100QDCKRQ1; Datasheet Link: https://www.ti.com/lit/ds/symlink/lm66100-q1.pdf?ts=1647247642374&ref_url=www.ti.com; Height: 1.1mm; Mouser Part Number: 595-LM66100QDCKRQ1; Mouser Price/Stock: https://www.mouser.co.uk/ProductDetail/Texas-Instruments/LM66100QDCKRQ1?qs=MyNHzdoqoQIvjdvtKQd0jA%3D%3D; Arrow Part Number: LM66100QDCKRQ1; Arrow Price/Stock: https://www.arrow.com/en/products/lm66100qdckrq1/texas-instruments?utm_currency=USD&region=nac
footprint SOT65P210X110-6N
pins: 1 VIN, 2 GND, 3 ~{CE}, 4 N/C, 5 ST, 6 VOUT

## LMR10510XMFE
designator IC?
Integrated Circuit; Manufacturer_Name: Texas Instruments; Manufacturer_Part_Number: LMR10510XMFE/NOPB; Datasheet Link: http://www.ti.com/lit/gpn/lmr10510; Height: 1.45mm; Mouser Part Number: 926-LMR10510XMFENOPB; Mouser Price/Stock: https://www.mouser.co.uk/ProductDetail/Texas-Instruments/LMR10510XMFE-NOPB?qs=cN01o9PeIQt6Gu2gtl1ODA%3D%3D; Arrow Part Number: LMR10510XMFE/NOPB; Arrow Price/Stock: https://www.arrow.com/en/products/lmr10510xmfenopb/texas-instruments?region=nac
footprint SOT95P280X145-5N
pins: 1 SW, 2 GND, 3 FB, 4 EN, 5 VIN

## LMR16006XDDCT
designator IC?
Integrated Circuit; Manufacturer_Name: Texas Instruments; Manufacturer_Part_Number: LMR16006XDDCT; Datasheet Link: http://www.ti.com/lit/ds/symlink/lmr16006.pdf; Height: 1.1mm; Mouser Part Number: 595-LMR16006XDDCT; Mouser Price/Stock: https://www.mouser.co.uk/ProductDetail/Texas-Instruments/LMR16006XDDCT?qs=1CfNGUMoiQ9XpVkX4RTJzg%3D%3D; Arrow Part Number: LMR16006XDDCT; Arrow Price/Stock: https://www.arrow.com/en/products/lmr16006xddct/texas-instruments?region=nac
footprint SOT95P280X110-6N
pins: 1 CB, 2 GND (power), 3 FB, 4 ~{SHDN}, 5 VIN (in), 6 SW